# Altium schematic symbol library Centralize.SchLib: 1081 symbols (part 16 of 26)
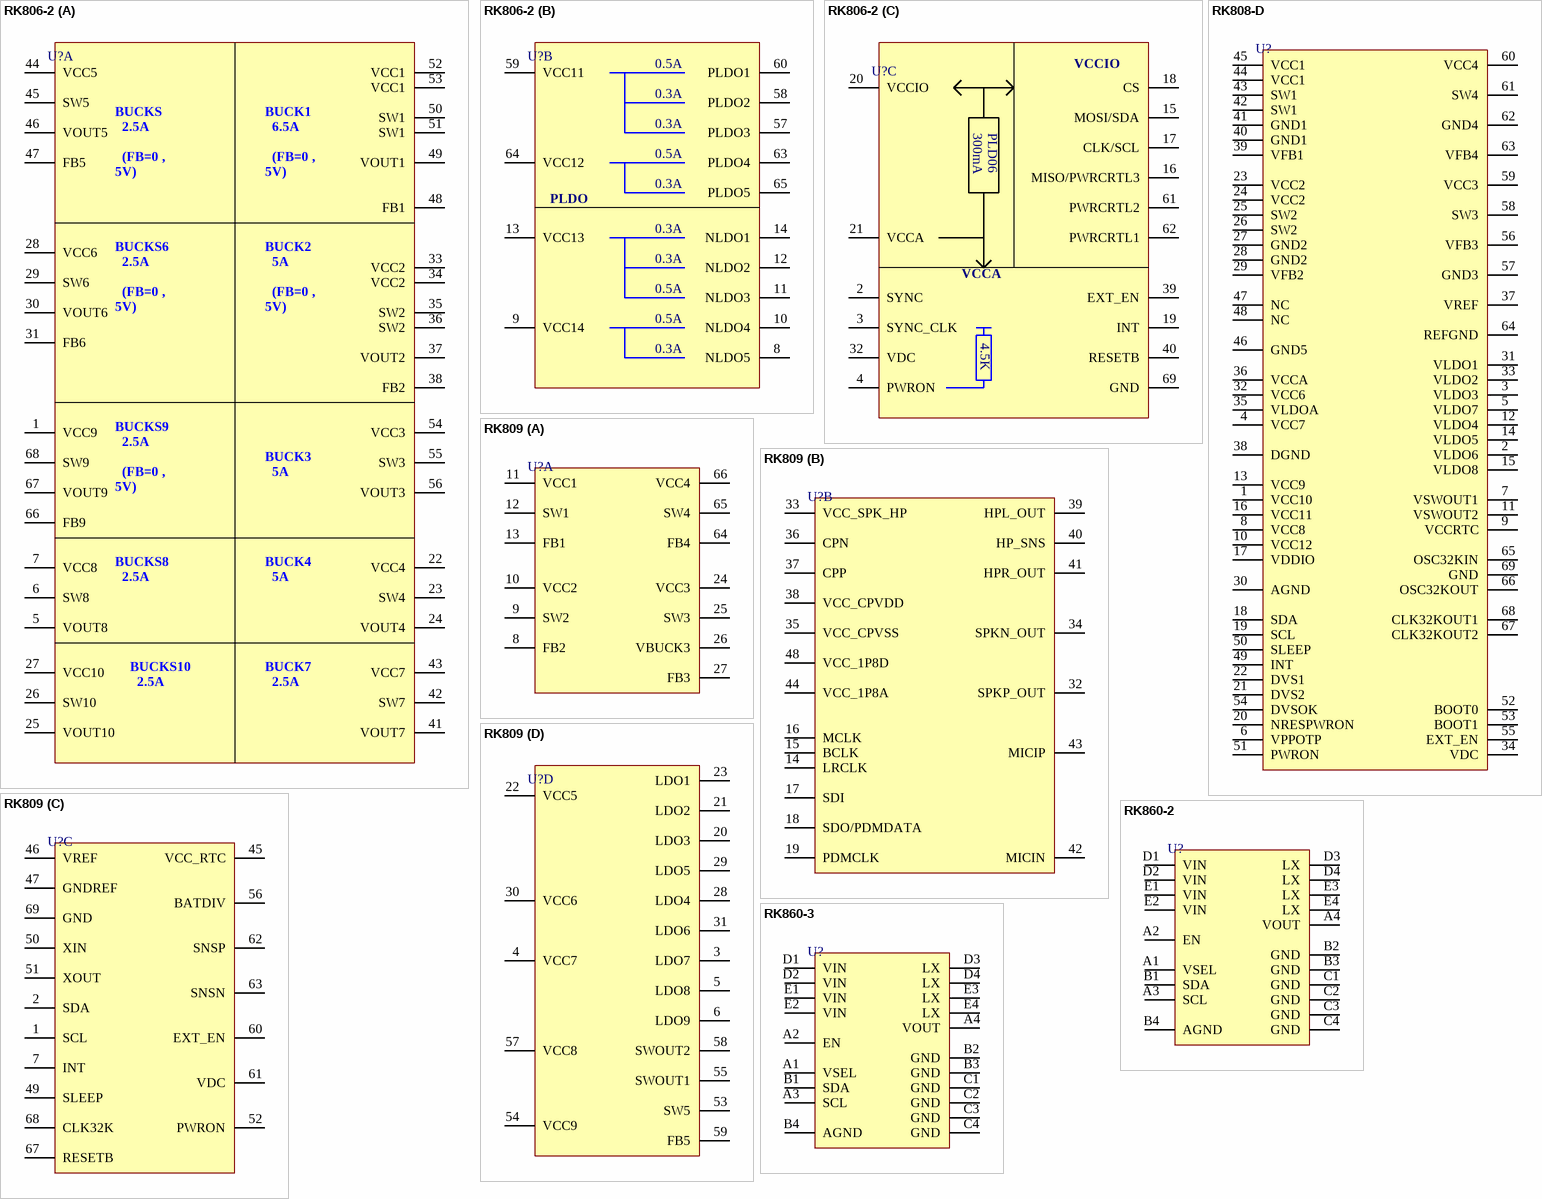
[diagram p62: symbols RK806-2 to RK860-3]

## RK860-3
designator U?
Power Management IC; Manufacturer: Rokchip; Manufacturer Part Number: RK860-3; Package: WLCSP-20; LCSC Part Number: *; ComponentLink1Description: LCSC; ComponentLink1URL: https://www.rutronik24.com/product/rockchip/rk860-3/18760321.html?emcs0=10&emcs1=null&emcs2=&emcs3=18760321; Item Type: IC
footprint WLCSP-20 (2.05x1.65) 0.4mm
pins: A1 VSEL, A2 EN, A3 SCL, A4 VOUT, B1 SDA, B2 GND, B3 GND, B4 AGND, C1 GND, C2 GND, C3 GND, C4 GND, D1 VIN, D2 VIN, D3 LX, D4 LX, E1 VIN, E2 VIN, E3 LX, E4 LX

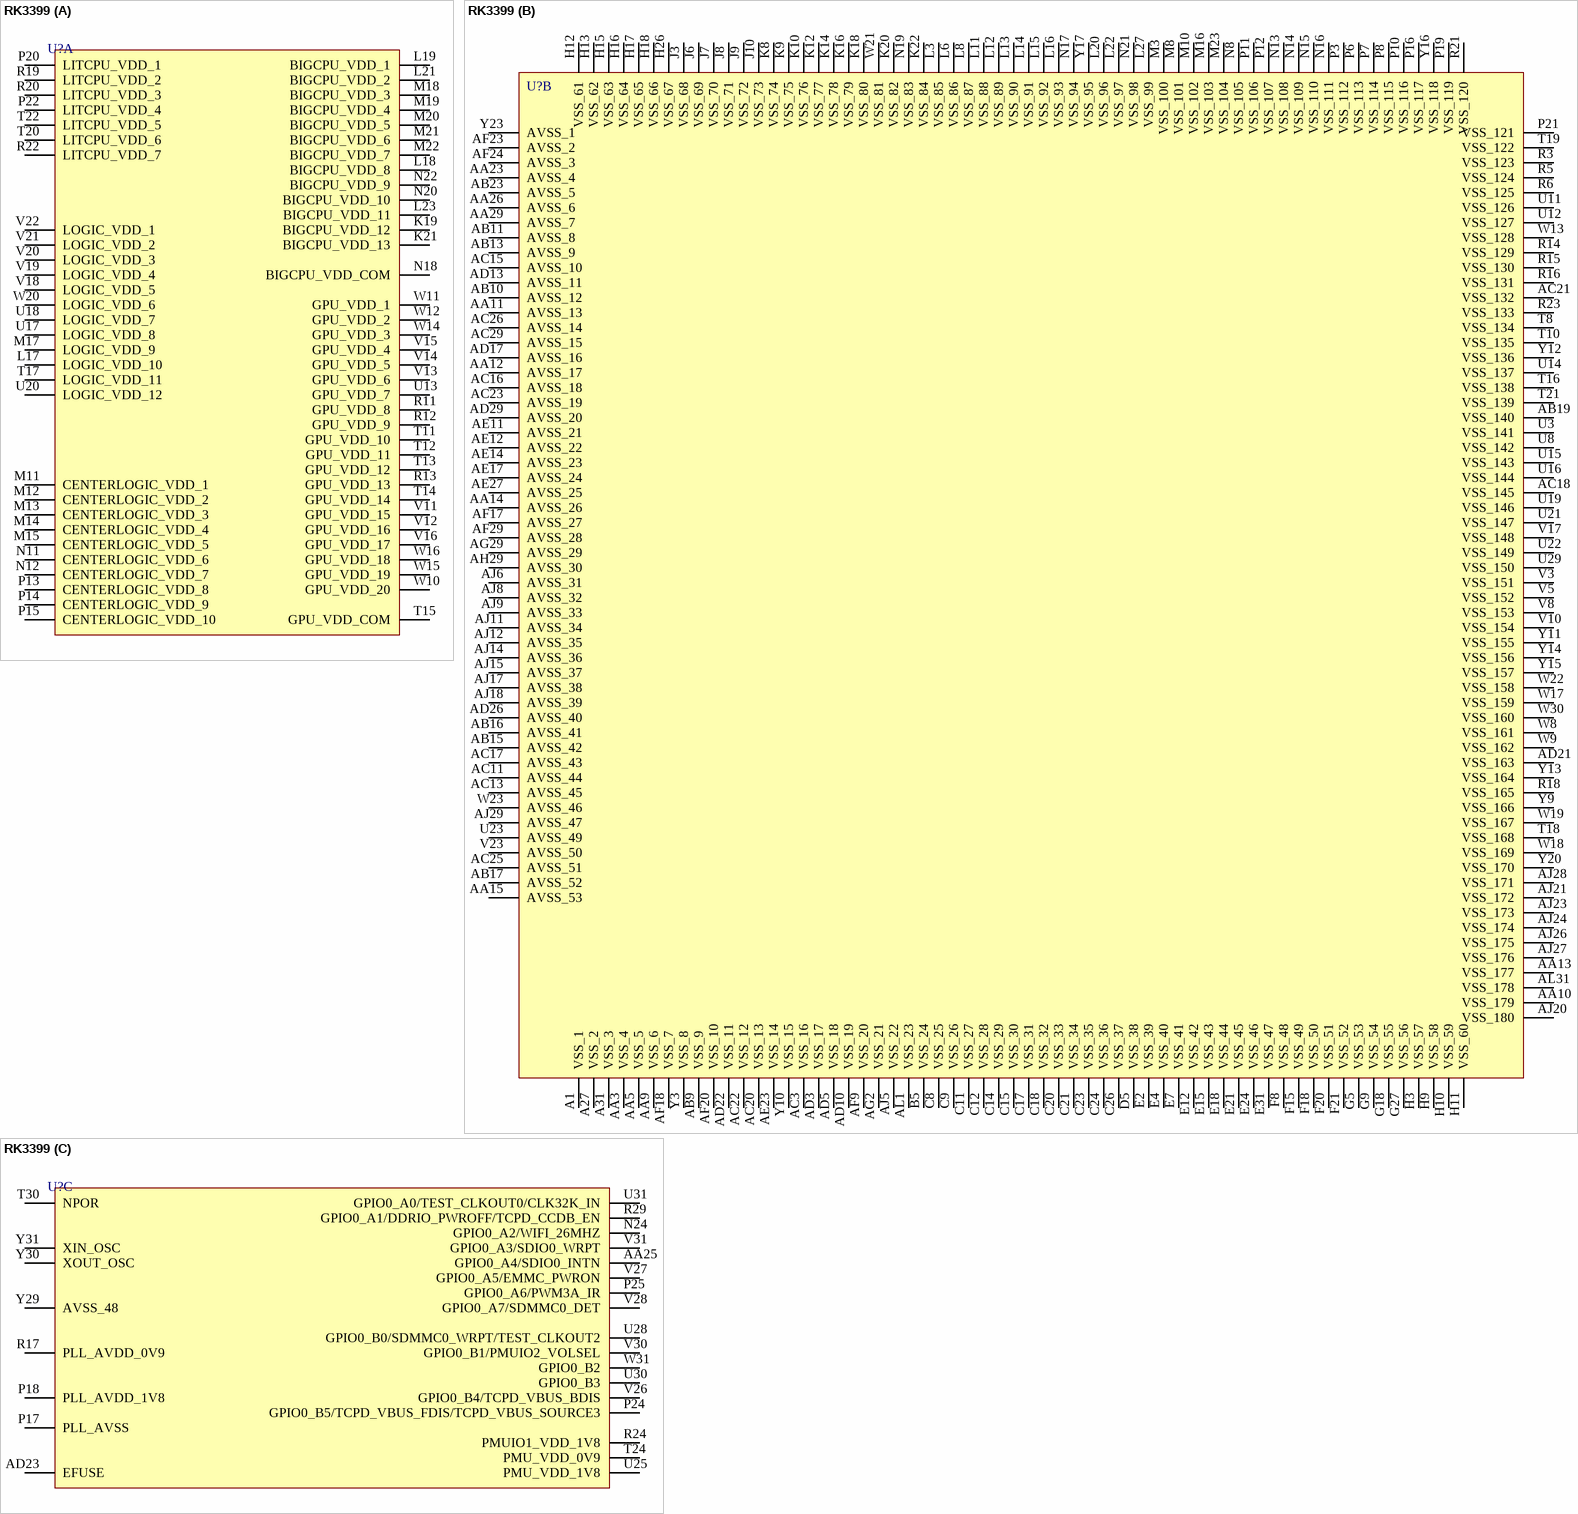
[diagram p21: symbol RK3399]

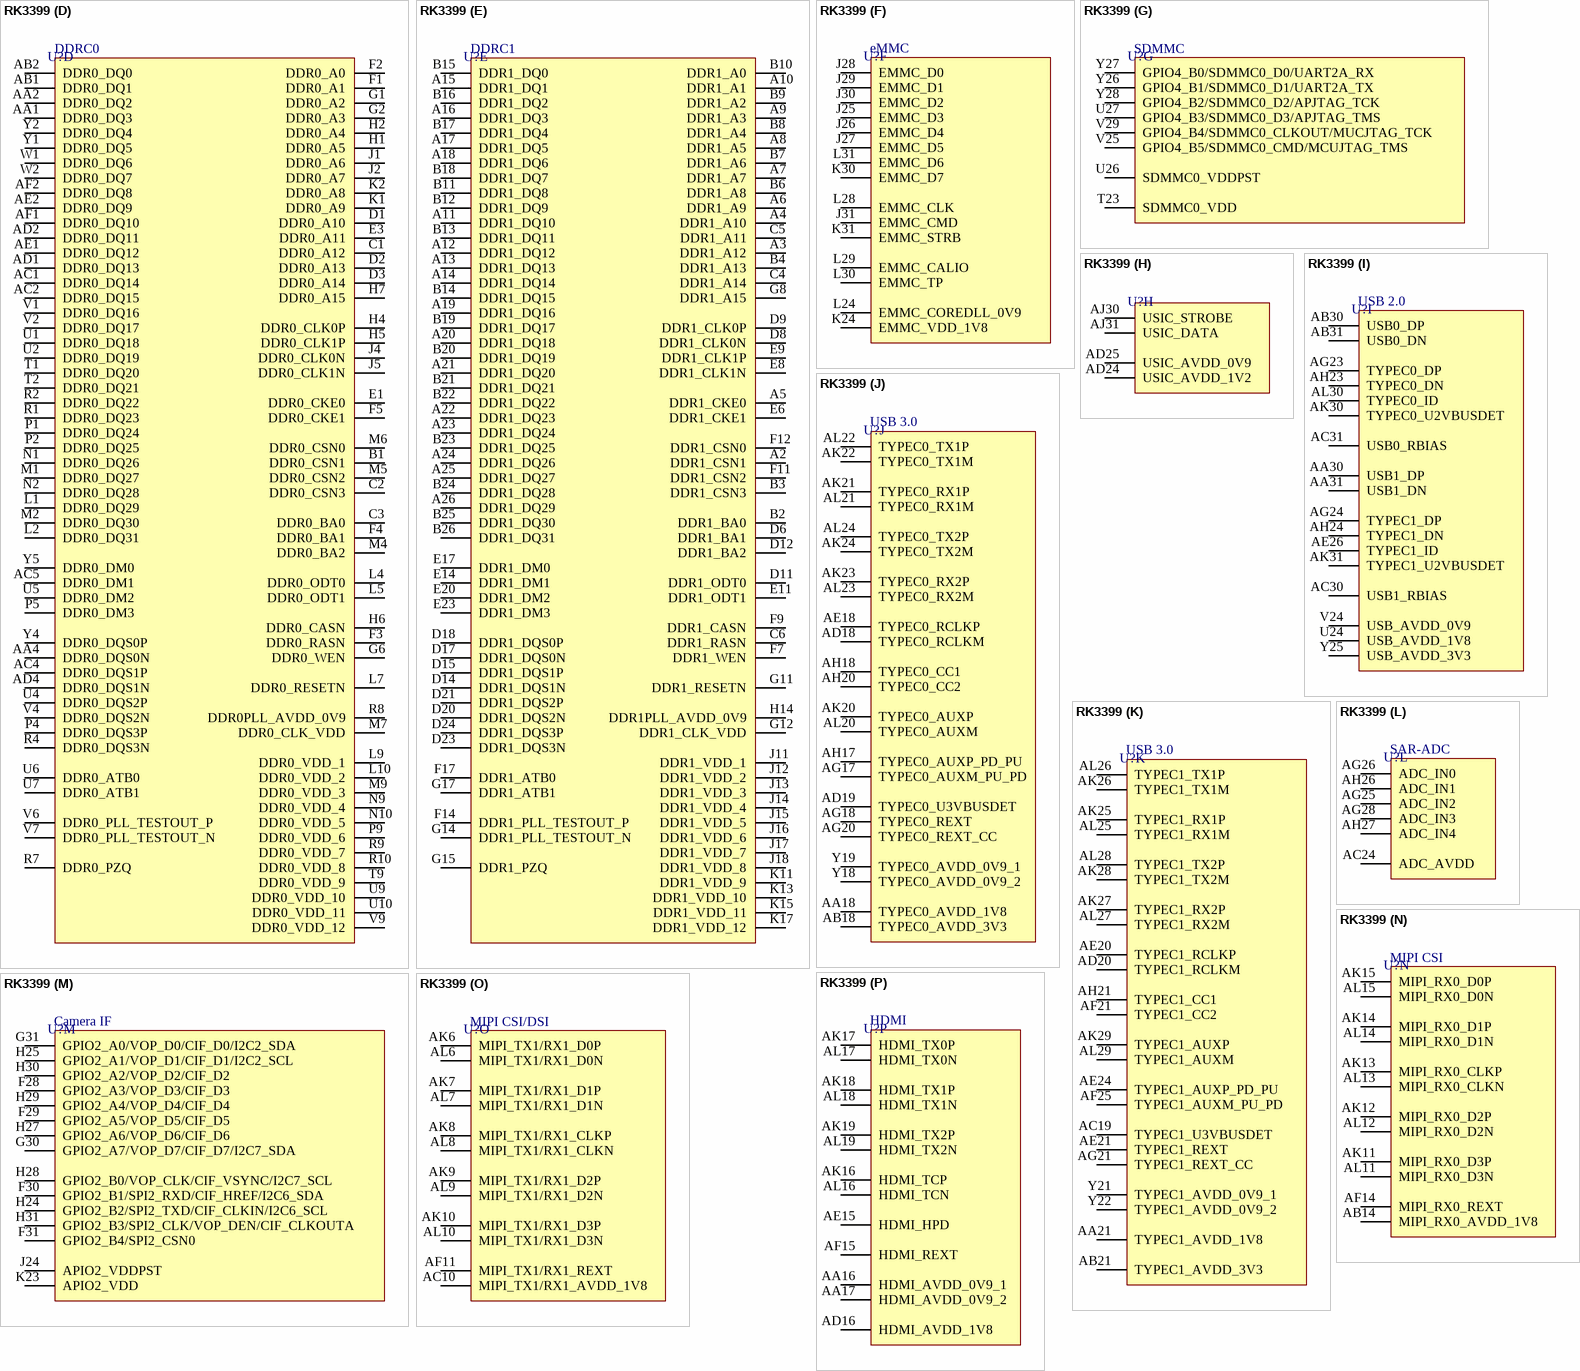
[diagram p22: symbol RK3399]

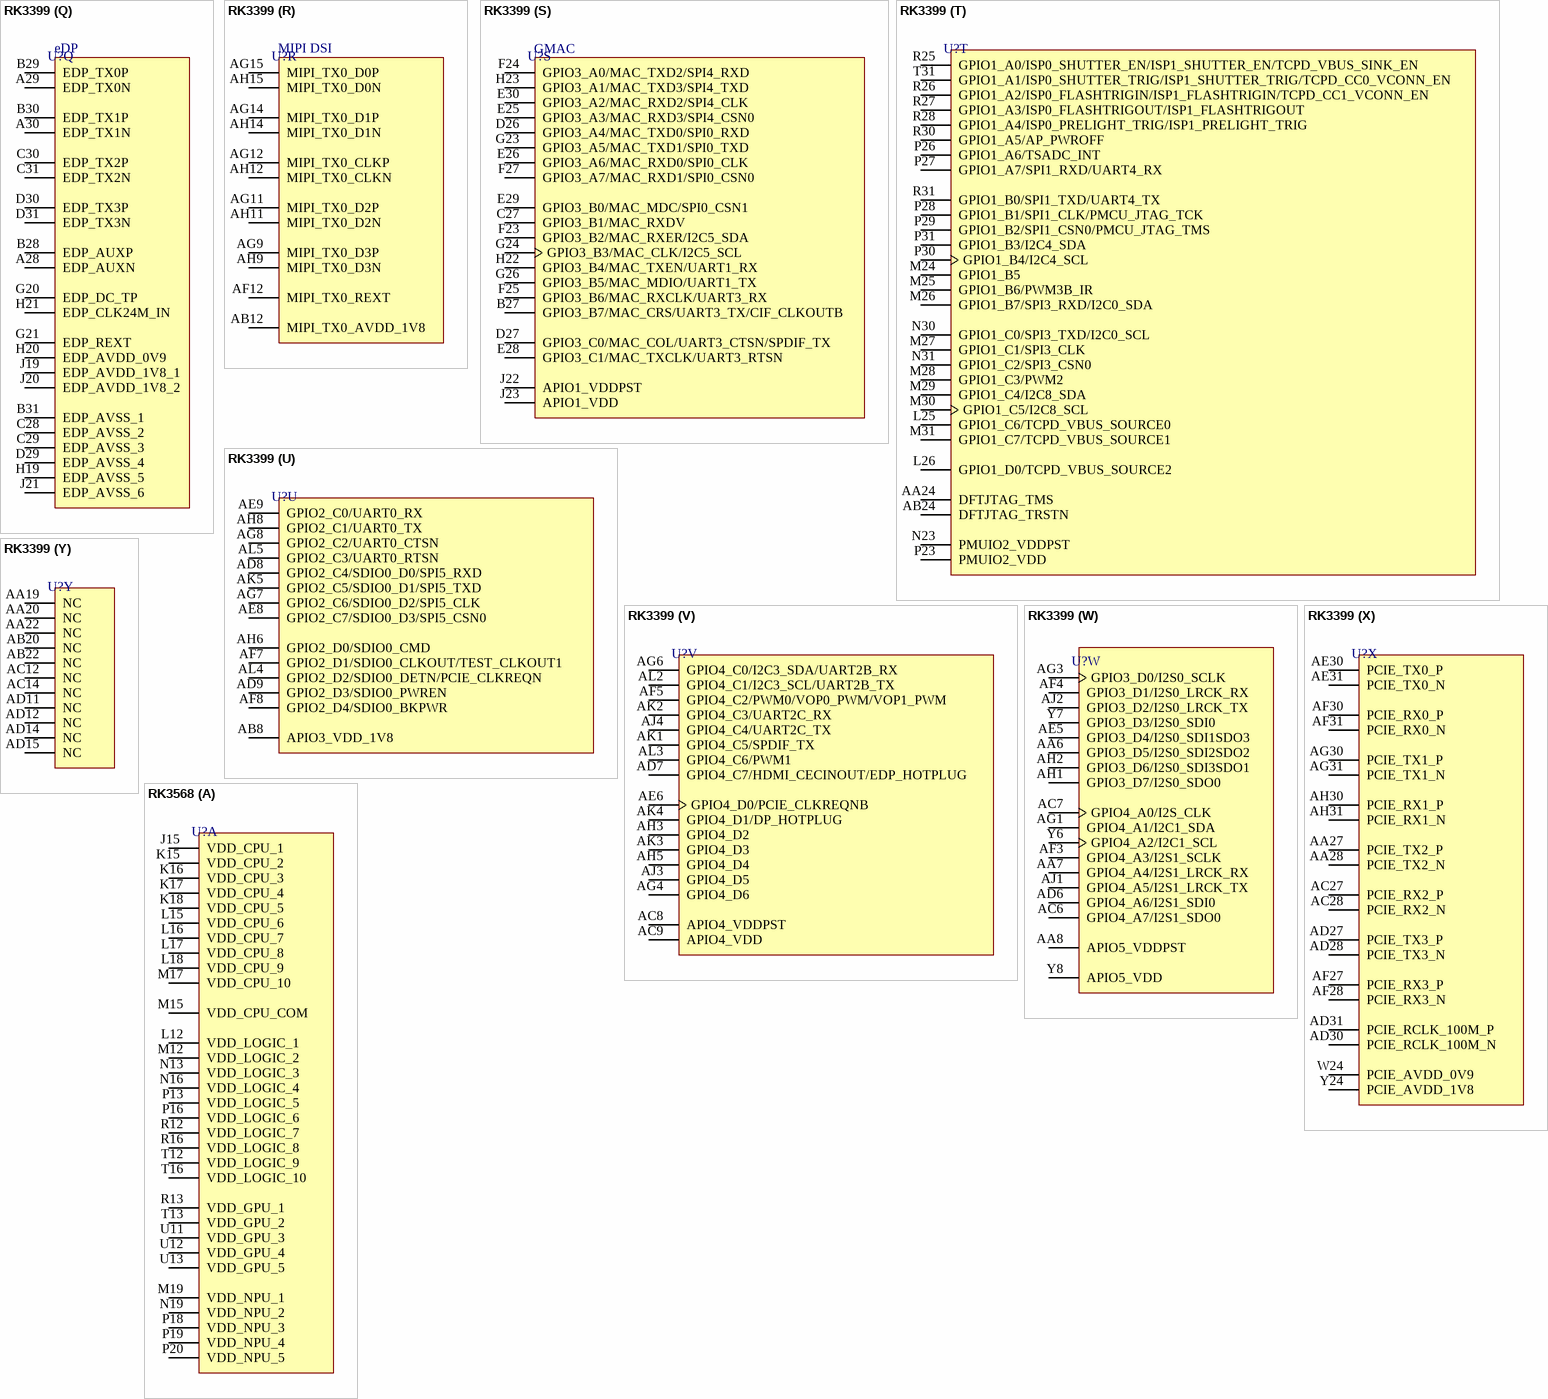
[diagram p23: symbols RK3399 to RK3568]

## RK3399
designator U?
RK3399 CPU BGA for HD set-top box chip BGA Chipset; Manufacturer: Fuzhou Rockchip Electronics; ComponentLink1Description: Aliexpress; ComponentLink1URL: https://www.aliexpress.com/item/1005001971093459.html?spm=a2g0n.productlist.0.0.3c7csv8Qsv8Quh&browser_id=3ac7e9efb8074641aaabc4d871f09748&aff_trace_key=&aff_platform=msite&m_page_id=181389a08711fc2600d8cc522bab8d702dd4189be0&gclid=&pdp_npi=2%40dis%21USD%21%2123.6%21%21%21%21%21%402101d91e16545120399167831e8b89%21%21sea&algo_pvid=4303aedd-774c-4013-953d-920f10b55003; Manufacturer Part Number: RK3399; Footprint: FCBGA828
footprint FCBGA828 (21x21)
part A pins: K19 BIGCPU_VDD_12, K21 BIGCPU_VDD_13, L17 LOGIC_VDD_10 (power), L18 BIGCPU_VDD_8, L19 BIGCPU_VDD_1, L21 BIGCPU_VDD_2, L23 BIGCPU_VDD_11, M11 CENTERLOGIC_VDD_1 (power), M12 CENTERLOGIC_VDD_2 (power), M13 CENTERLOGIC_VDD_3 (power), M14 CENTERLOGIC_VDD_4 (power), M15 CENTERLOGIC_VDD_5 (power), M17 LOGIC_VDD_9 (power), M18 BIGCPU_VDD_3, M19 BIGCPU_VDD_4, M20 BIGCPU_VDD_5, M21 BIGCPU_VDD_6, M22 BIGCPU_VDD_7, N11 CENTERLOGIC_VDD_6 (power), N12 CENTERLOGIC_VDD_7 (power), N18 BIGCPU_VDD_COM, N20 BIGCPU_VDD_10, N22 BIGCPU_VDD_9, P13 CENTERLOGIC_VDD_8 (power), P14 CENTERLOGIC_VDD_9 (power), P15 CENTERLOGIC_VDD_10 (power), P20 LITCPU_VDD_1 (power), P22 LITCPU_VDD_4 (power), R11 GPU_VDD_8, R12 GPU_VDD_9, R13 GPU_VDD_13, R19 LITCPU_VDD_2 (power), R20 LITCPU_VDD_3 (power), R22 LITCPU_VDD_7 (power), T11 GPU_VDD_10, T12 GPU_VDD_11, T13 GPU_VDD_12, T14 GPU_VDD_14, T15 GPU_VDD_COM, T17 LOGIC_VDD_11 (power), T20 LITCPU_VDD_6 (power), T22 LITCPU_VDD_5 (power), U13 GPU_VDD_7, U17 LOGIC_VDD_8 (power), U18 LOGIC_VDD_7 (power), U20 LOGIC_VDD_12 (power), V11 GPU_VDD_15, V12 GPU_VDD_16, V13 GPU_VDD_6, V14 GPU_VDD_5, V15 GPU_VDD_4, V16 GPU_VDD_17, V18 LOGIC_VDD_5 (power), V19 LOGIC_VDD_4 (power), V20 LOGIC_VDD_3 (power), V21 LOGIC_VDD_2 (power), V22 LOGIC_VDD_1 (power), W10 GPU_VDD_20, W11 GPU_VDD_1, W12 GPU_VDD_2, W14 GPU_VDD_3, W15 GPU_VDD_19, W16 GPU_VDD_18, W20 LOGIC_VDD_6 (power)
part B pins: A1 VSS_1 (power), A27 VSS_2 (power), A31 VSS_3 (power), AA3 VSS_4 (power), AA5 VSS_5 (power), AA9 VSS_6 (power), AA10 VSS_179 (power), AA11 AVSS_13, AA12 AVSS_17, AA13 VSS_177 (power), AA14 AVSS_26, AA15 AVSS_53, AA23 AVSS_4, AA26 AVSS_6, AA29 AVSS_7, AB9 VSS_9 (power), AB10 AVSS_12, AB11 AVSS_8, AB13 AVSS_9, AB15 AVSS_42, AB16 AVSS_41, AB17 AVSS_52, AB19 VSS_140 (power), AB23 AVSS_5, AC3 VSS_16 (power), AC11 AVSS_44, AC13 AVSS_45, AC15 AVSS_10, AC16 AVSS_18, AC17 AVSS_43, AC18 VSS_145 (power), AC20 VSS_13 (power), AC21 VSS_132 (power), AC22 VSS_12 (power), AC23 AVSS_19, AC25 AVSS_51, AC26 AVSS_14, AC29 AVSS_15, AD3 VSS_17 (power), AD5 VSS_18 (power), AD10 VSS_19 (power), AD13 AVSS_11, AD17 AVSS_16, AD21 VSS_163 (power), AD22 VSS_11 (power), AD26 AVSS_40, AD29 AVSS_20, AE11 AVSS_21, AE12 AVSS_22, AE14 AVSS_23, AE17 AVSS_24, AE23 VSS_14 (power), AE27 AVSS_25, AF9 VSS_20 (power), AF17 AVSS_27, AF18 VSS_7 (power), AF20 VSS_10 (power), AF23 AVSS_2, AF24 AVSS_3, AF29 AVSS_28, AG2 VSS_21 (power), AG29 AVSS_29, AH29 AVSS_30, AJ5 VSS_22 (power), AJ6 AVSS_31, AJ8 AVSS_32, AJ9 AVSS_33, AJ11 AVSS_34, AJ12 AVSS_35, AJ14 AVSS_36, AJ15 AVSS_37, AJ17 AVSS_38, AJ18 AVSS_39, AJ20 VSS_180 (power), AJ21 VSS_172 (power), AJ23 VSS_173 (power), AJ24 VSS_174 (power), AJ26 VSS_175 (power), AJ27 VSS_176 (power), AJ28 VSS_171 (power), AJ29 AVSS_47, AL1 VSS_23 (power), AL31 VSS_178 (power), B5 VSS_24 (power), C8 VSS_25 (power), C9 VSS_26 (power), C11 VSS_27 (power), C12 VSS_28 (power), C14 VSS_29 (power), C15 VSS_30 (power), C17 VSS_31 (power), C18 VSS_32 (power), C20 VSS_33 (power), C21 VSS_34 (power), C23 VSS_35 (power), C24 VSS_36 (power), C26 VSS_37 (power), D5 VSS_38 (power), E2 VSS_39 (power), E4 VSS_40 (power), E7 VSS_41 (power), E12 VSS_42 (power), E15 VSS_43 (power), E18 VSS_44 (power), E21 VSS_45 (power), E24 VSS_46 (power), E31 VSS_47 (power), F8 VSS_48 (power), F15 VSS_49 (power), F18 VSS_50 (power), F20 VSS_51 (power), F21 VSS_52 (power), G5 VSS_53 (power), G9 VSS_54 (power), G18 VSS_55 (power), G27 VSS_56 (power), H3 VSS_57 (power), H9 VSS_58 (power), H10 VSS_59 (power), H11 VSS_60 (power), H12 VSS_61 (power), H13 VSS_62 (power), H15 VSS_63 (power), H16 VSS_64 (power), H17 VSS_65 (power), H18 VSS_66 (power), H26 VSS_67 (power), J3 VSS_68 (power), J6 VSS_69 (power), J7 VSS_70 (power), J8 VSS_71 (power), J9 VSS_72 (power), J10 VSS_73 (power), K8 VSS_74 (power), K9 VSS_75 (power), K10 VSS_76 (power), K12 VSS_77 (power), K14 VSS_78 (power), K16 VSS_79 (power), K18 VSS_80 (power), K20 VSS_82 (power), K22 VSS_84 (power), L3 VSS_85 (power), L6 VSS_86 (power), L8 VSS_87 (power), L11 VSS_88 (power), L12 VSS_89 (power), L13 VSS_90 (power), L14 VSS_91 (power), L15 VSS_92 (power), L16 VSS_93 (power), L20 VSS_96 (power), L22 VSS_97 (power), L27 VSS_99 (power), M3 VSS_100 (power), M8 VSS_101 (power), M10 VSS_102 (power), M16 VSS_103 (power), M23 VSS_104 (power), N8 VSS_105 (power), N13 VSS_108 (power), N14 VSS_109 (power), N15 VSS_110 (power), N16 VSS_111 (power), N17 VSS_94 (power), N19 VSS_83 (power), N21 VSS_98 (power), P3 VSS_112 (power), P6 VSS_113 (power), P7 VSS_114 (power), P8 VSS_115 (power), P10 VSS_116 (power), P11 VSS_106 (power), P12 VSS_107 (power), P16 VSS_117 (power), P19 VSS_119 (power), P21 VSS_121 (power), R3 VSS_123 (power), R5 VSS_124 (power), R6 VSS_125 (power), R14 VSS_129 (power), R15 VSS_130 (power), R16 VSS_131 (power), R18 VSS_165 (power), R21 VSS_120 (power), R23 VSS_133 (power), T8 VSS_134 (power), T10 VSS_135 (power), T16 VSS_138 (power), T18 VSS_168 (power), T19 VSS_122 (power), T21 VSS_139 (power), U3 VSS_141 (power), U8 VSS_142 (power), U11 VSS_126 (power), U12 VSS_127 (power), U14 VSS_137 (power), U15 VSS_143 (power), U16 VSS_144 (power), U19 VSS_146 (power), U21 VSS_147 (power), U22 VSS_149 (power), U23 AVSS_49, U29 VSS_150 (power), V3 VSS_151 (power), V5 VSS_152 (power), V8 VSS_153 (power), V10 VSS_154 (power), V17 VSS_148 (power), V23 AVSS_50, W8 VSS_161 (power), W9 VSS_162 (power), W13 VSS_128 (power), W17 VSS_159 (power), W18 VSS_169 (power), W19 VSS_167 (power), W21 VSS_81 (power), W22 VSS_158 (power), W23 AVSS_46, W30 VSS_160 (power), Y3 VSS_8 (power), Y9 VSS_166 (power), Y10 VSS_15 (power), Y11 VSS_155 (power), Y12 VSS_136 (power), Y13 VSS_164 (power), Y14 VSS_156 (power), Y15 VSS_157 (power), Y16 VSS_118 (power), Y17 VSS_95 (power), Y20 VSS_170 (power), Y23 AVSS_1
part C pins: AA25 GPIO0_A4/SDIO0_INTN, AD23 EFUSE, N24 GPIO0_A2/WIFI_26MHZ, P17 PLL_AVSS, P18 PLL_AVDD_1V8, P24 GPIO0_B5/TCPD_VBUS_FDIS/TCPD_VBUS_SOURCE3, P25 GPIO0_A6/PWM3A_IR, R17 PLL_AVDD_0V9, R24 PMUIO1_VDD_1V8, R29 GPIO0_A1/DDRIO_PWROFF/TCPD_CCDB_EN, T24 PMU_VDD_0V9, T30 NPOR, U25 PMU_VDD_1V8, U28 GPIO0_B0/SDMMC0_WRPT/TEST_CLKOUT2, U30 GPIO0_B3, U31 GPIO0_A0/TEST_CLKOUT0/CLK32K_IN, V26 GPIO0_B4/TCPD_VBUS_BDIS, V27 GPIO0_A5/EMMC_PWRON, V28 GPIO0_A7/SDMMC0_DET, V30 GPIO0_B1/PMUIO2_VOLSEL, V31 GPIO0_A3/SDIO0_WRPT, W31 GPIO0_B2, Y29 AVSS_48, Y30 XOUT_OSC, Y31 XIN_OSC
part D pins: AA1 DDR0_DQ3, AA2 DDR0_DQ2, AA4 DDR0_DQS0N, AB1 DDR0_DQ1, AB2 DDR0_DQ0, AC1 DDR0_DQ14, AC2 DDR0_DQ15, AC4 DDR0_DQS1P, AC5 DDR0_DM1, AD1 DDR0_DQ13, AD2 DDR0_DQ11, AD4 DDR0_DQS1N, AE1 DDR0_DQ12, AE2 DDR0_DQ9, AF1 DDR0_DQ10, AF2 DDR0_DQ8, B1 DDR0_CSN1, C1 DDR0_A12, C2 DDR0_CSN3, C3 DDR0_BA0, D1 DDR0_A10, D2 DDR0_A13, D3 DDR0_A14, E1 DDR0_CKE0, E3 DDR0_A11, F1 DDR0_A1, F2 DDR0_A0, F3 DDR0_RASN, F4 DDR0_BA1, F5 DDR0_CKE1, G1 DDR0_A2, G2 DDR0_A3, G6 DDR0_WEN, H1 DDR0_A5, H2 DDR0_A4, H4 DDR0_CLK0P, H5 DDR0_CLK1P, H6 DDR0_CASN, H7 DDR0_A15, J1 DDR0_A6, J2 DDR0_A7, J4 DDR0_CLK0N, J5 DDR0_CLK1N, K1 DDR0_A9, K2 DDR0_A8, L1 DDR0_DQ29, L2 DDR0_DQ31, L4 DDR0_ODT0, L5 DDR0_ODT1, L7 DDR0_RESETN, L9 DDR0_VDD_1, L10 DDR0_VDD_2, M1 DDR0_DQ27, M2 DDR0_DQ30, M4 DDR0_BA2, M5 DDR0_CSN2, M6 DDR0_CSN0, M7 DDR0_CLK_VDD, M9 DDR0_VDD_3, N1 DDR0_DQ26, N2 DDR0_DQ28, N9 DDR0_VDD_4, N10 DDR0_VDD_5, P1 DDR0_DQ24, P2 DDR0_DQ25, P4 DDR0_DQS3P, P5 DDR0_DM3, P9 DDR0_VDD_6, R1 DDR0_DQ23, R2 DDR0_DQ22, R4 DDR0_DQS3N, R7 DDR0_PZQ, R8 DDR0PLL_AVDD_0V9, R9 DDR0_VDD_7, R10 DDR0_VDD_8, T1 DDR0_DQ20, T2 DDR0_DQ21, T9 DDR0_VDD_9, U1 DDR0_DQ18, U2 DDR0_DQ19, U4 DDR0_DQS2P, U5 DDR0_DM2, U6 DDR0_ATB0, U7 DDR0_ATB1, U9 DDR0_VDD_10, U10 DDR0_VDD_11, V1 DDR0_DQ16, V2 DDR0_DQ17, V4 DDR0_DQS2N, V6 DDR0_PLL_TESTOUT_P, V7 DDR0_PLL_TESTOUT_N, V9 DDR0_VDD_12, W1 DDR0_DQ6, W2 DDR0_DQ7, Y1 DDR0_DQ5, Y2 DDR0_DQ4, Y4 DDR0_DQS0P, Y5 DDR0_DM0
part E pins: A2 DDR1_CSN1, A3 DDR1_A12, A4 DDR1_A10, A5 DDR1_CKE0, A6 DDR1_A9, A7 DDR1_A7, A8 DDR1_A5, A9 DDR1_A3, A10 DDR1_A1, A11 DDR1_DQ10, A12 DDR1_DQ12, A13 DDR1_DQ13, A14 DDR1_DQ14, A15 DDR1_DQ1, A16 DDR1_DQ3, A17 DDR1_DQ5, A18 DDR1_DQ6, A19 DDR1_DQ16, A20 DDR1_DQ18, A21 DDR1_DQ20, A22 DDR1_DQ23, A23 DDR1_DQ24, A24 DDR1_DQ26, A25 DDR1_DQ27, A26 DDR1_DQ29, B2 DDR1_BA0, B3 DDR1_CSN3, B4 DDR1_A13, B6 DDR1_A8, B7 DDR1_A6, B8 DDR1_A4, B9 DDR1_A2, B10 DDR1_A0, B11 DDR1_DQ8, B12 DDR1_DQ9, B13 DDR1_DQ11, B14 DDR1_DQ15, B15 DDR1_DQ0, B16 DDR1_DQ2, B17 DDR1_DQ4, B18 DDR1_DQ7, B19 DDR1_DQ17, B20 DDR1_DQ19, B21 DDR1_DQ21, B22 DDR1_DQ22, B23 DDR1_DQ25, B24 DDR1_DQ28, B25 DDR1_DQ30, B26 DDR1_DQ31, C4 DDR1_A14, C5 DDR1_A11, C6 DDR1_RASN, D6 DDR1_BA1, D8 DDR1_CLK0N, D9 DDR1_CLK0P, D11 DDR1_ODT0, D12 DDR1_BA2, D14 DDR1_DQS1N, D15 DDR1_DQS1P, D17 DDR1_DQS0N, D18 DDR1_DQS0P, D20 DDR1_DQS2N, D21 DDR1_DQS2P, D23 DDR1_DQS3N, D24 DDR1_DQS3P, E6 DDR1_CKE1, E8 DDR1_CLK1N, E9 DDR1_CLK1P, E11 DDR1_ODT1, E14 DDR1_DM1, E17 DDR1_DM0, E20 DDR1_DM2, E23 DDR1_DM3, F7 DDR1_WEN, F9 DDR1_CASN, F11 DDR1_CSN2, F12 DDR1_CSN0, F14 DDR1_PLL_TESTOUT_P, F17 DDR1_ATB0, G8 DDR1_A15, G11 DDR1_RESETN, G12 DDR1_CLK_VDD, G14 DDR1_PLL_TESTOUT_N, G15 DDR1_PZQ, G17 DDR1_ATB1, H14 DDR1PLL_AVDD_0V9, J11 DDR1_VDD_1, J12 DDR1_VDD_2, J13 DDR1_VDD_3, J14 DDR1_VDD_4, J15 DDR1_VDD_5, J16 DDR1_VDD_6, J17 DDR1_VDD_7, J18 DDR1_VDD_8, K11 DDR1_VDD_9, K13 DDR1_VDD_10, K15 DDR1_VDD_11, K17 DDR1_VDD_12
part F pins: J25 EMMC_D3, J26 EMMC_D4, J27 EMMC_D5, J28 EMMC_D0, J29 EMMC_D1, J30 EMMC_D2, J31 EMMC_CMD, K24 EMMC_VDD_1V8, K30 EMMC_D7, K31 EMMC_STRB, L24 EMMC_COREDLL_0V9, L28 EMMC_CLK, L29 EMMC_CALIO, L30 EMMC_TP, L31 EMMC_D6
part G pins: T23 SDMMC0_VDD, U26 SDMMC0_VDDPST, U27 GPIO4_B3/SDMMC0_D3/APJTAG_TMS, V25 GPIO4_B5/SDMMC0_CMD/MCUJTAG_TMS, V29 GPIO4_B4/SDMMC0_CLKOUT/MUCJTAG_TCK, Y26 GPIO4_B1/SDMMC0_D1/UART2A_TX, Y27 GPIO4_B0/SDMMC0_D0/UART2A_RX, Y28 GPIO4_B2/SDMMC0_D2/APJTAG_TCK
part H pins: AD24 USIC_AVDD_1V2, AD25 USIC_AVDD_0V9, AJ30 USIC_STROBE, AJ31 USIC_DATA
part I pins: AA30 USB1_DP, AA31 USB1_DN, AB30 USB0_DP, AB31 USB0_DN, AC30 USB1_RBIAS, AC31 USB0_RBIAS, AE26 TYPEC1_ID, AG23 TYPEC0_DP, AG24 TYPEC1_DP, AH23 TYPEC0_DN, AH24 TYPEC1_DN, AK30 TYPEC0_U2VBUSDET, AK31 TYPEC1_U2VBUSDET, AL30 TYPEC0_ID, U24 USB_AVDD_1V8, V24 USB_AVDD_0V9, Y25 USB_AVDD_3V3
part J pins: AA18 TYPEC0_AVDD_1V8, AB18 TYPEC0_AVDD_3V3, AD18 TYPEC0_RCLKM, AD19 TYPEC0_U3VBUSDET, AE18 TYPEC0_RCLKP, AG17 TYPEC0_AUXM_PU_PD, AG18 TYPEC0_REXT, AG20 TYPEC0_REXT_CC, AH17 TYPEC0_AUXP_PD_PU, AH18 TYPEC0_CC1, AH20 TYPEC0_CC2, AK20 TYPEC0_AUXP, AK21 TYPEC0_RX1P, AK22 TYPEC0_TX1M, AK23 TYPEC0_RX2P, AK24 TYPEC0_TX2M, AL20 TYPEC0_AUXM, AL21 TYPEC0_RX1M, AL22 TYPEC0_TX1P, AL23 TYPEC0_RX2M, AL24 TYPEC0_TX2P, Y18 TYPEC0_AVDD_0V9_2, Y19 TYPEC0_AVDD_0V9_1
part K pins: AA21 TYPEC1_AVDD_1V8, AB21 TYPEC1_AVDD_3V3, AC19 TYPEC1_U3VBUSDET, AD20 TYPEC1_RCLKM, AE20 TYPEC1_RCLKP, AE21 TYPEC1_REXT, AE24 TYPEC1_AUXP_PD_PU, AF21 TYPEC1_CC2, AF25 TYPEC1_AUXM_PU_PD, AG21 TYPEC1_REXT_CC, AH21 TYPEC1_CC1, AK25 TYPEC1_RX1P, AK26 TYPEC1_TX1M, AK27 TYPEC1_RX2P, AK28 TYPEC1_TX2M, AK29 TYPEC1_AUXP, AL25 TYPEC1_RX1M, AL26 TYPEC1_TX1P, AL27 TYPEC1_RX2M, AL28 TYPEC1_TX2P, AL29 TYPEC1_AUXM, Y21 TYPEC1_AVDD_0V9_1, Y22 TYPEC1_AVDD_0V9_2
part L pins: AC24 ADC_AVDD, AG25 ADC_IN2, AG26 ADC_IN0, AG28 ADC_IN3, AH26 ADC_IN1, AH27 ADC_IN4
part M pins: F28 GPIO2_A3/VOP_D3/CIF_D3, F29 GPIO2_A5/VOP_D5/CIF_D5, F30 GPIO2_B1/SPI2_RXD/CIF_HREF/I2C6_SDA, F31 GPIO2_B4/SPI2_CSN0, G30 GPIO2_A7/VOP_D7/CIF_D7/I2C7_SDA, G31 GPIO2_A0/VOP_D0/CIF_D0/I2C2_SDA, H24 GPIO2_B2/SPI2_TXD/CIF_CLKIN/I2C6_SCL, H25 GPIO2_A1/VOP_D1/CIF_D1/I2C2_SCL, H27 GPIO2_A6/VOP_D6/CIF_D6, H28 GPIO2_B0/VOP_CLK/CIF_VSYNC/I2C7_SCL, H29 GPIO2_A4/VOP_D4/CIF_D4, H30 GPIO2_A2/VOP_D2/CIF_D2, H31 GPIO2_B3/SPI2_CLK/VOP_DEN/CIF_CLKOUTA, J24 APIO2_VDDPST, K23 APIO2_VDD
part N pins: AB14 MIPI_RX0_AVDD_1V8, AF14 MIPI_RX0_REXT, AK11 MIPI_RX0_D3P, AK12 MIPI_RX0_D2P, AK13 MIPI_RX0_CLKP, AK14 MIPI_RX0_D1P, AK15 MIPI_RX0_D0P, AL11 MIPI_RX0_D3N, AL12 MIPI_RX0_D2N, AL13 MIPI_RX0_CLKN, AL14 MIPI_RX0_D1N, AL15 MIPI_RX0_D0N
part O pins: AC10 MIPI_TX1/RX1_AVDD_1V8, AF11 MIPI_TX1/RX1_REXT, AK6 MIPI_TX1/RX1_D0P, AK7 MIPI_TX1/RX1_D1P, AK8 MIPI_TX1/RX1_CLKP, AK9 MIPI_TX1/RX1_D2P, AK10 MIPI_TX1/RX1_D3P, AL6 MIPI_TX1/RX1_D0N, AL7 MIPI_TX1/RX1_D1N, AL8 MIPI_TX1/RX1_CLKN, AL9 MIPI_TX1/RX1_D2N, AL10 MIPI_TX1/RX1_D3N
part P pins: AA16 HDMI_AVDD_0V9_1, AA17 HDMI_AVDD_0V9_2, AD16 HDMI_AVDD_1V8, AE15 HDMI_HPD, AF15 HDMI_REXT, AK16 HDMI_TCP, AK17 HDMI_TX0P, AK18 HDMI_TX1P, AK19 HDMI_TX2P, AL16 HDMI_TCN, AL17 HDMI_TX0N, AL18 HDMI_TX1N, AL19 HDMI_TX2N
part Q pins: A28 EDP_AUXN, A29 EDP_TX0N, A30 EDP_TX1N, B28 EDP_AUXP, B29 EDP_TX0P, B30 EDP_TX1P, B31 EDP_AVSS_1, C28 EDP_AVSS_2, C29 EDP_AVSS_3, C30 EDP_TX2P, C31 EDP_TX2N, D29 EDP_AVSS_4, D30 EDP_TX3P, D31 EDP_TX3N, G20 EDP_DC_TP, G21 EDP_REXT, H19 EDP_AVSS_5, H20 EDP_AVDD_0V9, H21 EDP_CLK24M_IN, J19 EDP_AVDD_1V8_1, J20 EDP_AVDD_1V8_2, J21 EDP_AVSS_6
part R pins: AB12 MIPI_TX0_AVDD_1V8, AF12 MIPI_TX0_REXT, AG9 MIPI_TX0_D3P, AG11 MIPI_TX0_D2P, AG12 MIPI_TX0_CLKP, AG14 MIPI_TX0_D1P, AG15 MIPI_TX0_D0P, AH9 MIPI_TX0_D3N, AH11 MIPI_TX0_D2N, AH12 MIPI_TX0_CLKN, AH14 MIPI_TX0_D1N, AH15 MIPI_TX0_D0N
part S pins: B27 GPIO3_B7/MAC_CRS/UART3_TX/CIF_CLKOUTB, C27 GPIO3_B1/MAC_RXDV, D26 GPIO3_A4/MAC_TXD0/SPI0_RXD, D27 GPIO3_C0/MAC_COL/UART3_CTSN/SPDIF_TX, E25 GPIO3_A3/MAC_RXD3/SPI4_CSN0, E26 GPIO3_A6/MAC_RXD0/SPI0_CLK, E28 GPIO3_C1/MAC_TXCLK/UART3_RTSN, E29 GPIO3_B0/MAC_MDC/SPI0_CSN1, E30 GPIO3_A2/MAC_RXD2/SPI4_CLK, F23 GPIO3_B2/MAC_RXER/I2C5_SDA, F24 GPIO3_A0/MAC_TXD2/SPI4_RXD, F25 GPIO3_B6/MAC_RXCLK/UART3_RX, F27 GPIO3_A7/MAC_RXD1/SPI0_CSN0, G23 GPIO3_A5/MAC_TXD1/SPI0_TXD, G24 GPIO3_B3/MAC_CLK/I2C5_SCL, G26 GPIO3_B5/MAC_MDIO/UART1_TX, H22 GPIO3_B4/MAC_TXEN/UART1_RX, H23 GPIO3_A1/MAC_TXD3/SPI4_TXD, J22 APIO1_VDDPST, J23 APIO1_VDD
part T pins: AA24 DFTJTAG_TMS, AB24 DFTJTAG_TRSTN, L25 GPIO1_C6/TCPD_VBUS_SOURCE0, L26 GPIO1_D0/TCPD_VBUS_SOURCE2, M24 GPIO1_B5, M25 GPIO1_B6/PWM3B_IR, M26 GPIO1_B7/SPI3_RXD/I2C0_SDA, M27 GPIO1_C1/SPI3_CLK, M28 GPIO1_C3/PWM2, M29 GPIO1_C4/I2C8_SDA, M30 GPIO1_C5/I2C8_SCL, M31 GPIO1_C7/TCPD_VBUS_SOURCE1, N23 PMUIO2_VDDPST, N30 GPIO1_C0/SPI3_TXD/I2C0_SCL, N31 GPIO1_C2/SPI3_CSN0, P23 PMUIO2_VDD, P26 GPIO1_A6/TSADC_INT, P27 GPIO1_A7/SPI1_RXD/UART4_RX, P28 GPIO1_B1/SPI1_CLK/PMCU_JTAG_TCK, P29 GPIO1_B2/SPI1_CSN0/PMCU_JTAG_TMS, P30 GPIO1_B4/I2C4_SCL, P31 GPIO1_B3/I2C4_SDA, R25 GPIO1_A0/ISP0_SHUTTER_EN/ISP1_SHUTTER_EN/TCPD_VBUS_SINK_EN, R26 GPIO1_A2/ISP0_FLASHTRIGIN/ISP1_FLASHTRIGIN/TCPD_CC1_VCONN_EN, R27 GPIO1_A3/ISP0_FLASHTRIGOUT/ISP1_FLASHTRIGOUT, R28 GPIO1_A4/ISP0_PRELIGHT_TRIG/ISP1_PRELIGHT_TRIG, R30 GPIO1_A5/AP_PWROFF, R31 GPIO1_B0/SPI1_TXD/UART4_TX, T31 GPIO1_A1/ISP0_SHUTTER_TRIG/ISP1_SHUTTER_TRIG/TCPD_CC0_VCONN_EN
part U pins: AB8 APIO3_VDD_1V8, AD8 GPIO2_C4/SDIO0_D0/SPI5_RXD, AD9 GPIO2_D3/SDIO0_PWREN, AE8 GPIO2_C7/SDIO0_D3/SPI5_CSN0, AE9 GPIO2_C0/UART0_RX, AF7 GPIO2_D1/SDIO0_CLKOUT/TEST_CLKOUT1, AF8 GPIO2_D4/SDIO0_BKPWR, AG7 GPIO2_C6/SDIO0_D2/SPI5_CLK, AG8 GPIO2_C2/UART0_CTSN, AH6 GPIO2_D0/SDIO0_CMD, AH8 GPIO2_C1/UART0_TX, AK5 GPIO2_C5/SDIO0_D1/SPI5_TXD, AL4 GPIO2_D2/SDIO0_DETN/PCIE_CLKREQN, AL5 GPIO2_C3/UART0_RTSN
part V pins: AC8 APIO4_VDDPST, AC9 APIO4_VDD, AD7 GPIO4_C7/HDMI_CECINOUT/EDP_HOTPLUG, AE6 GPIO4_D0/PCIE_CLKREQNB, AF5 GPIO4_C2/PWM0/VOP0_PWM/VOP1_PWM, AG4 GPIO4_D6, AG6 GPIO4_C0/I2C3_SDA/UART2B_RX, AH3 GPIO4_D2, AH5 GPIO4_D4, AJ3 GPIO4_D5, AJ4 GPIO4_C4/UART2C_TX, AK1 GPIO4_C5/SPDIF_TX, AK2 GPIO4_C3/UART2C_RX, AK3 GPIO4_D3, AK4 GPIO4_D1/DP_HOTPLUG, AL2 GPIO4_C1/I2C3_SCL/UART2B_TX, AL3 GPIO4_C6/PWM1
part W pins: AA6 GPIO3_D5/I2S0_SDI2SDO2, AA7 GPIO4_A4/I2S1_LRCK_RX, AA8 APIO5_VDDPST, AC6 GPIO4_A7/I2S1_SDO0, AC7 GPIO4_A0/I2S_CLK, AD6 GPIO4_A6/I2S1_SDI0, AE5 GPIO3_D4/I2S0_SDI1SDO3, AF3 GPIO4_A3/I2S1_SCLK, AF4 GPIO3_D1/I2S0_LRCK_RX, AG1 GPIO4_A1/I2C1_SDA, AG3 GPIO3_D0/I2S0_SCLK, AH1 GPIO3_D7/I2S0_SDO0, AH2 GPIO3_D6/I2S0_SDI3SDO1, AJ1 GPIO4_A5/I2S1_LRCK_TX, AJ2 GPIO3_D2/I2S0_LRCK_TX, Y6 GPIO4_A2/I2C1_SCL, Y7 GPIO3_D3/I2S0_SDI0, Y8 APIO5_VDD
part X pins: AA27 PCIE_TX2_P, AA28 PCIE_TX2_N, AC27 PCIE_RX2_P, AC28 PCIE_RX2_N, AD27 PCIE_TX3_P, AD28 PCIE_TX3_N, AD30 PCIE_RCLK_100M_N, AD31 PCIE_RCLK_100M_P, AE30 PCIE_TX0_P, AE31 PCIE_TX0_N, AF27 PCIE_RX3_P, AF28 PCIE_RX3_N, AF30 PCIE_RX0_P, AF31 PCIE_RX0_N, AG30 PCIE_TX1_P, AG31 PCIE_TX1_N, AH30 PCIE_RX1_P, AH31 PCIE_RX1_N, W24 PCIE_AVDD_0V9, Y24 PCIE_AVDD_1V8
part Y pins: AA19 NC, AA20 NC, AA22 NC, AB20 NC, AB22 NC, AC12 NC, AC14 NC, AD11 NC, AD12 NC, AD14 NC, AD15 NC
part D text: DDRC0
part E text: DDRC1
part F text: eMMC
part G text: SDMMC
part I text: USB 2.0
part J text: USB 3.0
part K text: USB 3.0
part L text: SAR-ADC
part M text: Camera IF
part N text: MIPI CSI
part O text: MIPI CSI/DSI
part P text: HDMI
part Q text: eDP
part R text: MIPI DSI
part S text: GMAC

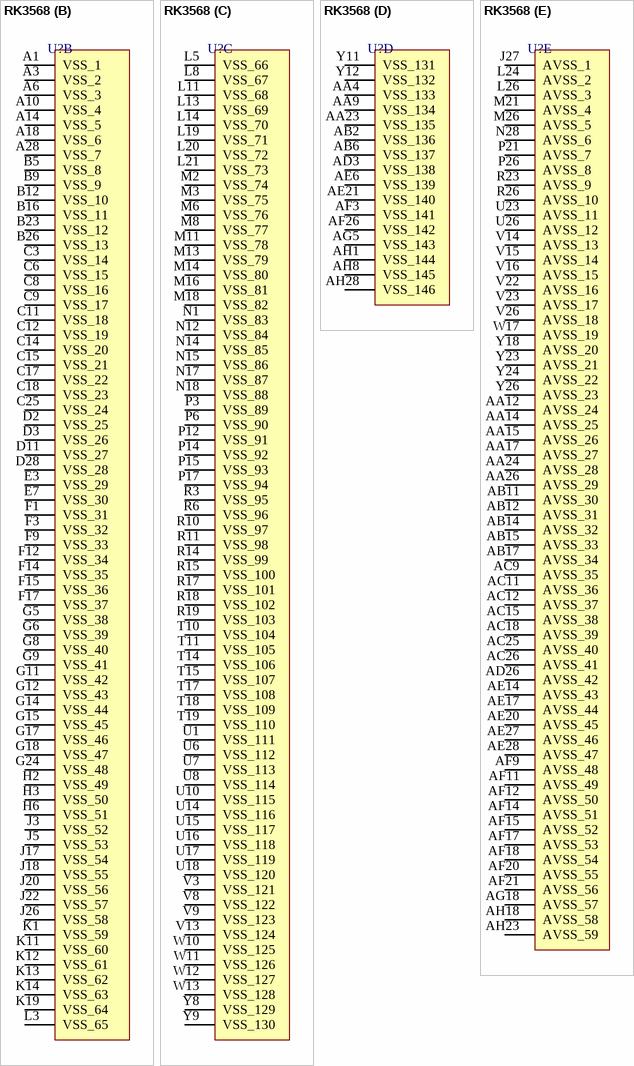
[diagram p24: symbol RK3568]

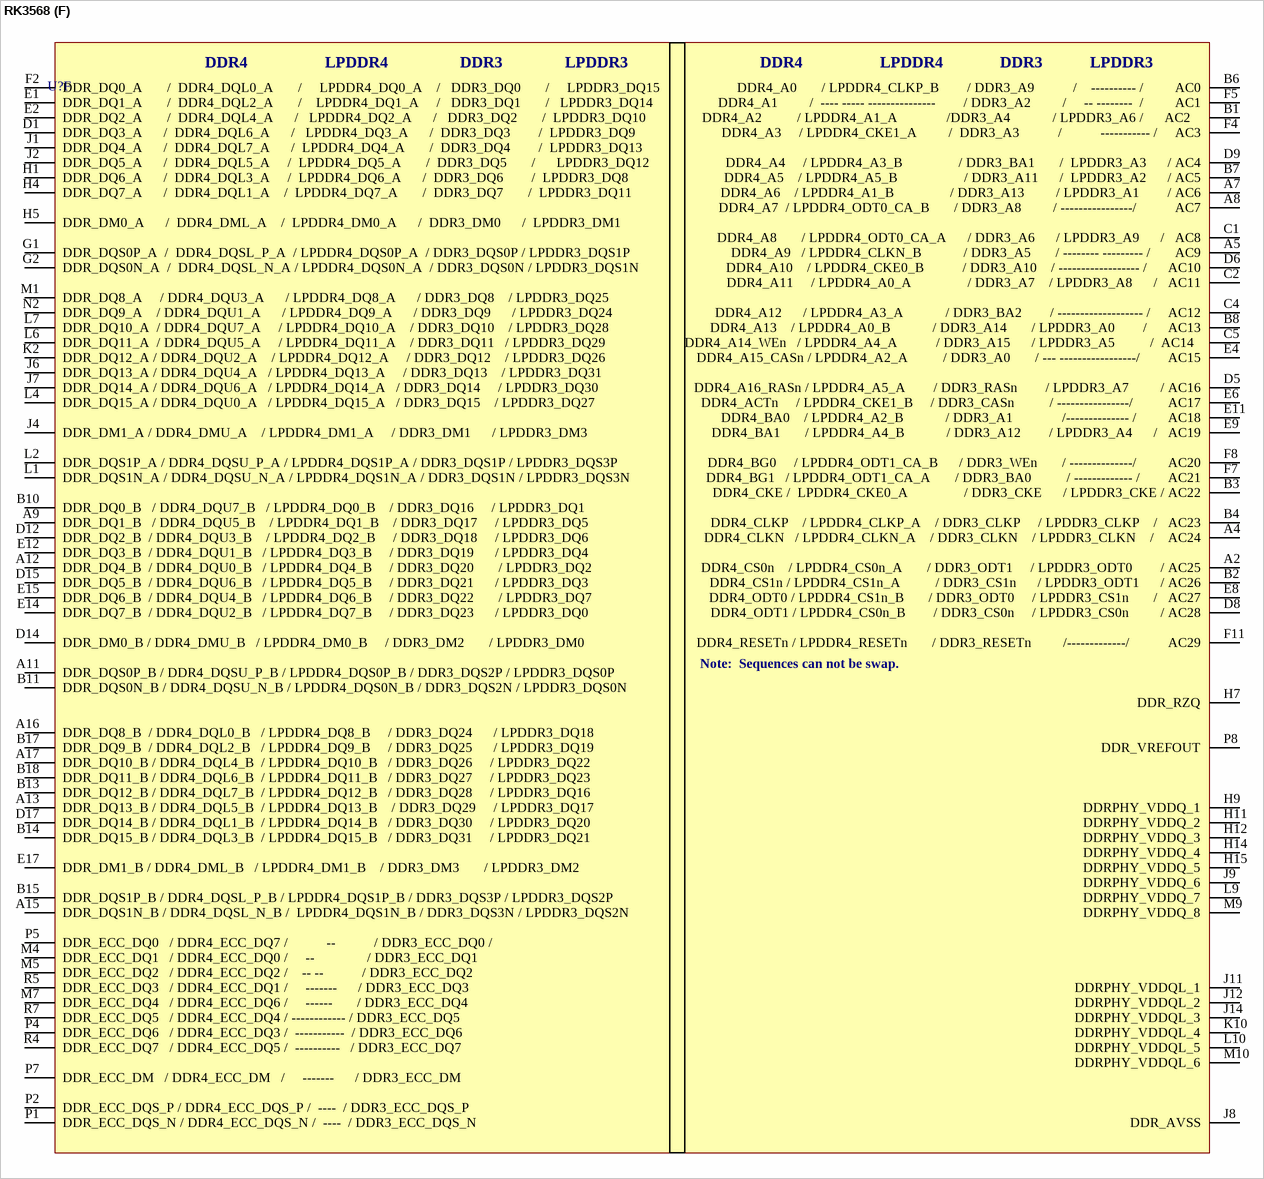
[diagram p25: symbol RK3568]

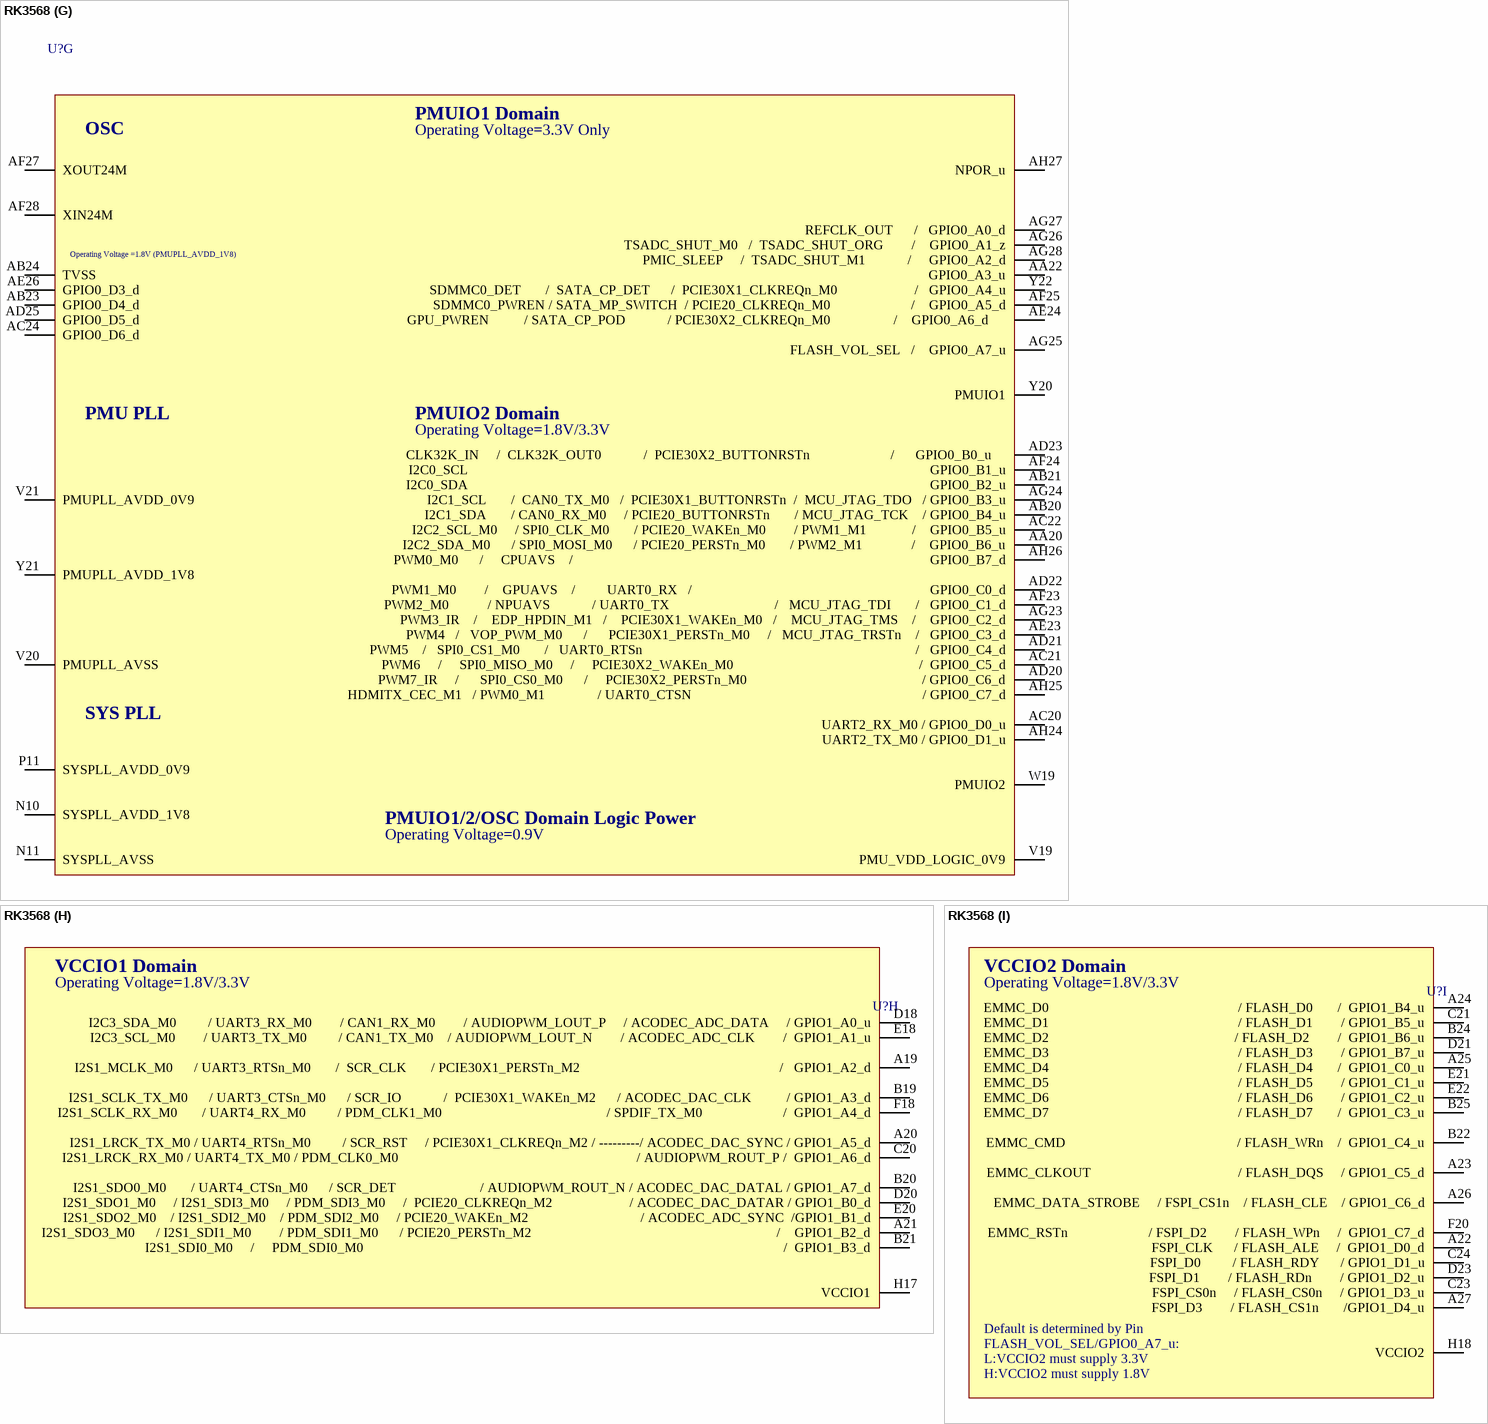
[diagram p26: symbol RK3568]

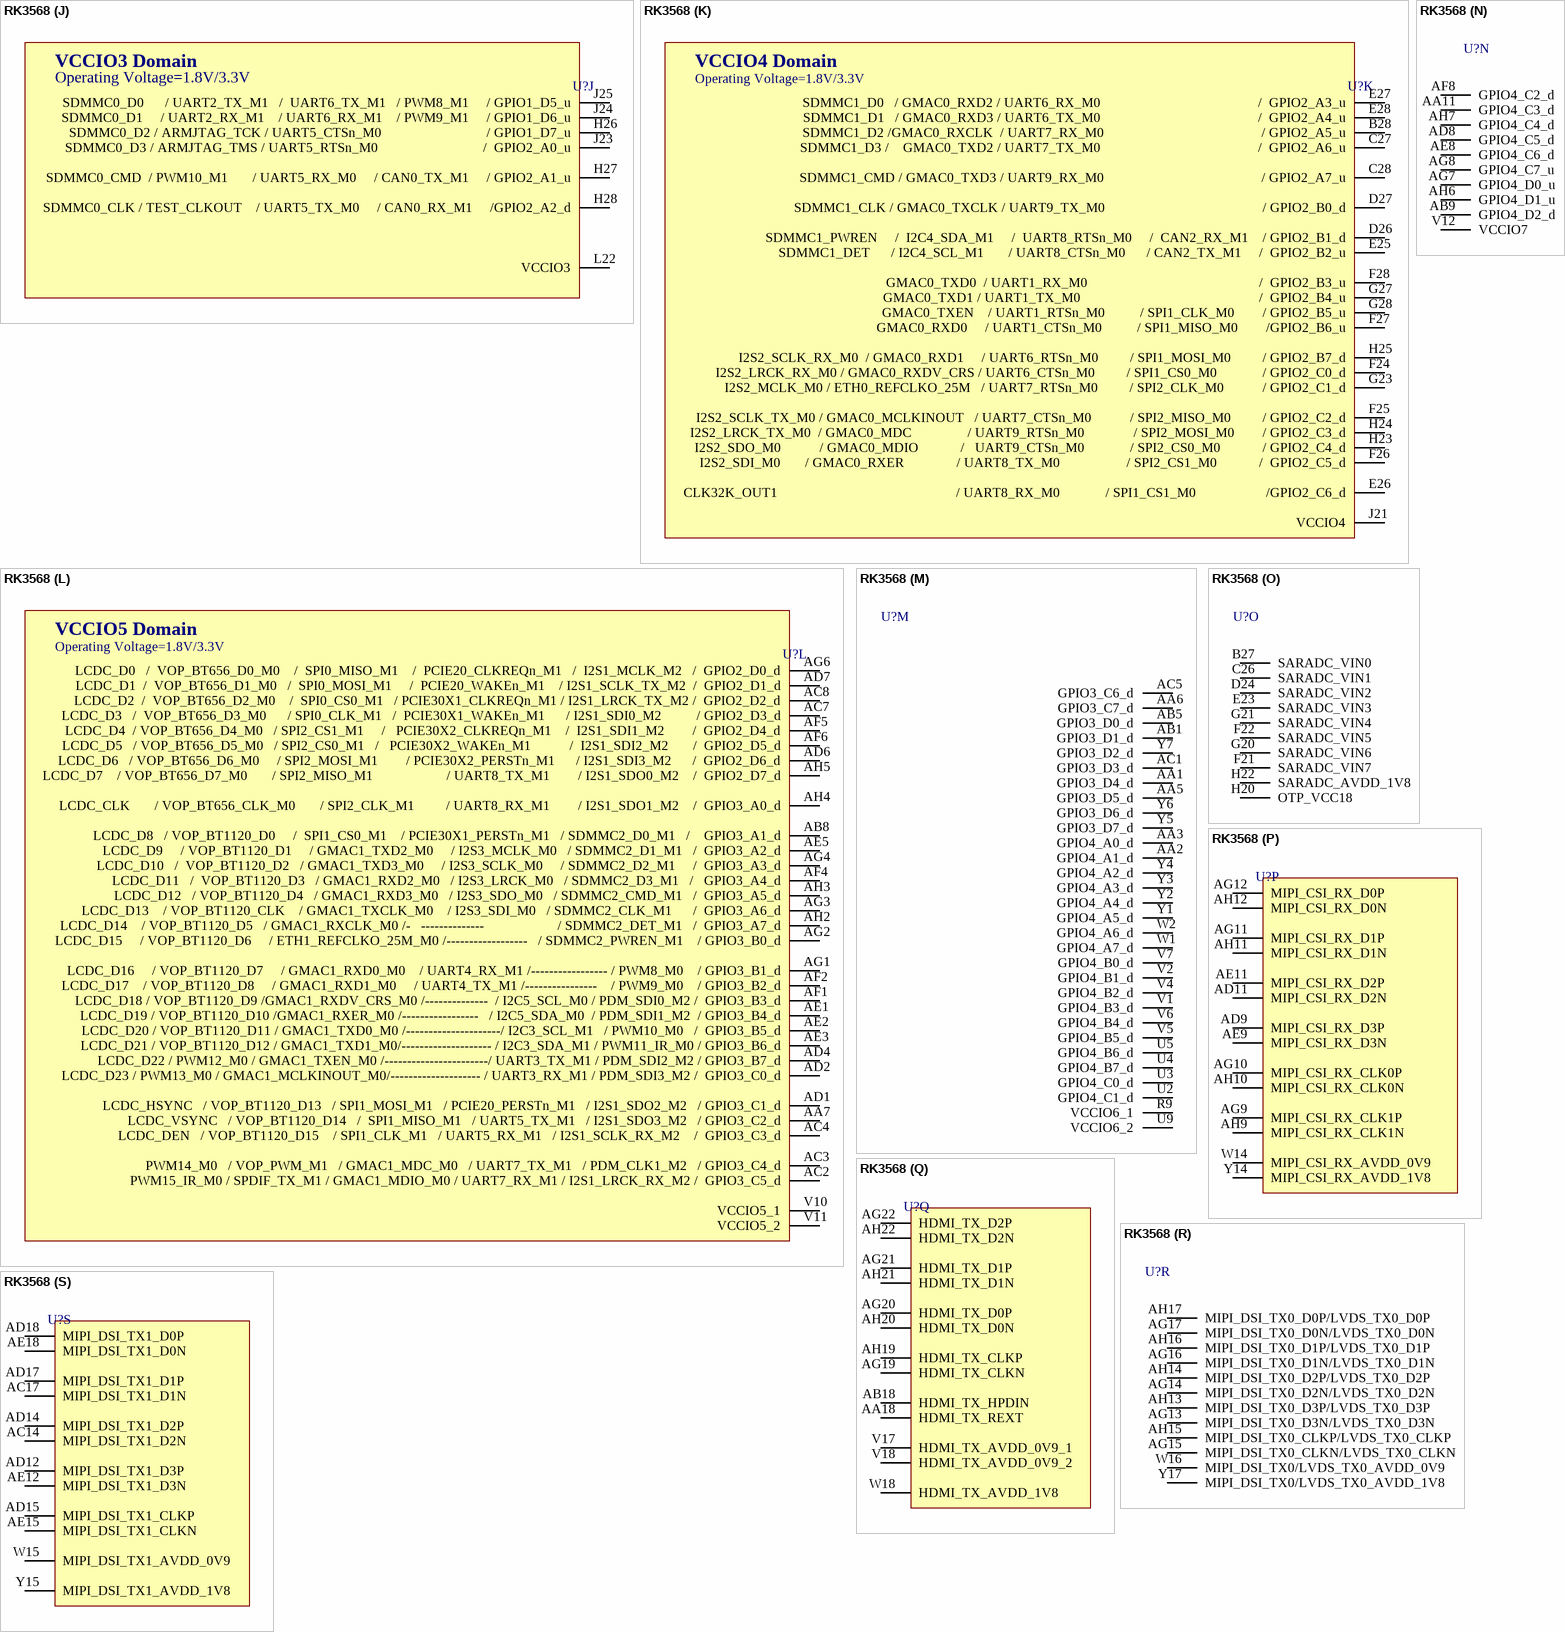
[diagram p27: symbol RK3568]

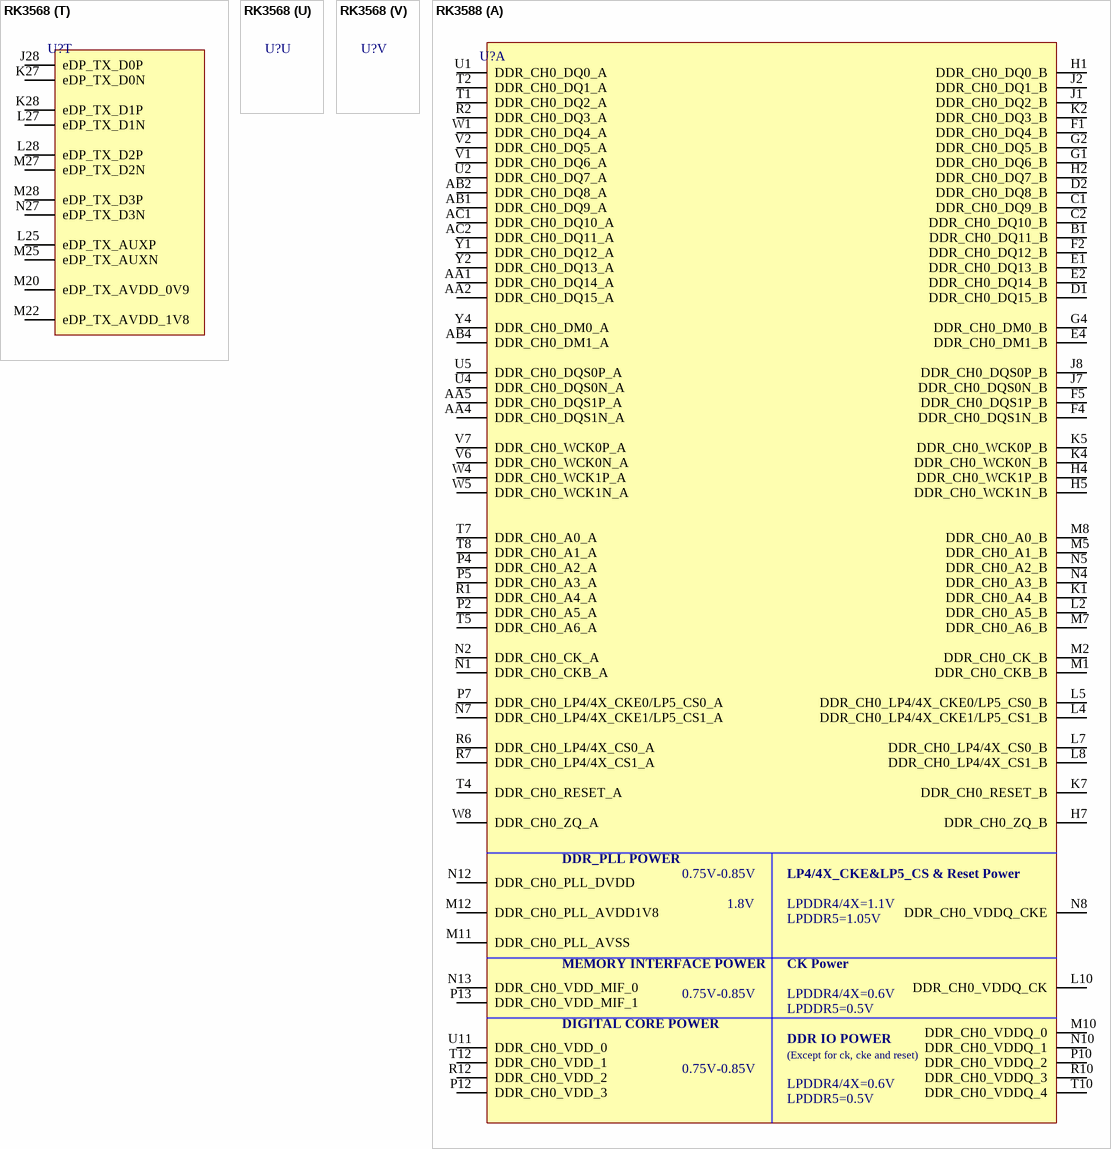
[diagram p28: symbols RK3568 to RK3588]

## RK3568
designator U?
RK3568 Power Management IC; Manufacturer: Rockchip; Manufacturer Part Number: RK3568; Package: FCBGA636L; Item Type: IC
part A pins: J15  VDD_CPU_1 , K15  VDD_CPU_2, K16 VDD_CPU_3, K17 VDD_CPU_4, K18 VDD_CPU_5, L12 VDD_LOGIC_1, L15 VDD_CPU_6, L16 VDD_CPU_7, L17 VDD_CPU_8, L18 VDD_CPU_9, M12 VDD_LOGIC_2, M15 VDD_CPU_COM, M17 VDD_CPU_10, M19 VDD_NPU_1, N13 VDD_LOGIC_3, N16 VDD_LOGIC_4, N19 VDD_NPU_2, P13 VDD_LOGIC_5, P16 VDD_LOGIC_6, P18 VDD_NPU_3, P19 VDD_NPU_4, P20 VDD_NPU_5, R12 VDD_LOGIC_7, R13 VDD_GPU_1, R16 VDD_LOGIC_8, T12 VDD_LOGIC_9, T13 VDD_GPU_2, T16 VDD_LOGIC_10, U11 VDD_GPU_3, U12 VDD_GPU_4, U13 VDD_GPU_5
part B pins: A1 VSS_1, A3 VSS_2, A6 VSS_3, A10 VSS_4, A14 VSS_5, A18 VSS_6, A28 VSS_7, B5 VSS_8, B9 VSS_9, B12 VSS_10, B16 VSS_11, B23 VSS_12, B26 VSS_13, C3 VSS_14, C6 VSS_15, C8 VSS_16, C9 VSS_17, C11 VSS_18, C12 VSS_19, C14 VSS_20, C15 VSS_21, C17 VSS_22, C18 VSS_23, C25 VSS_24, D2 VSS_25, D3 VSS_26, D11 VSS_27, D28 VSS_28, E3 VSS_29, E7 VSS_30, F1 VSS_31, F3 VSS_32, F9 VSS_33, F12 VSS_34, F14 VSS_35, F15 VSS_36, F17 VSS_37, G5 VSS_38, G6 VSS_39, G8 VSS_40, G9 VSS_41, G11 VSS_42, G12 VSS_43, G14 VSS_44, G15 VSS_45, G17 VSS_46, G18 VSS_47, G24 VSS_48, H2 VSS_49, H3 VSS_50, H6 VSS_51, J3 VSS_52, J5 VSS_53, J17 VSS_54, J18 VSS_55, J20 VSS_56, J22 VSS_57, J26 VSS_58, K1 VSS_59, K11 VSS_60, K12 VSS_61, K13 VSS_62, K14 VSS_63, K19 VSS_64, L3 VSS_65
part C pins: L5 VSS_66, L8 VSS_67, L11 VSS_68, L13 VSS_69, L14 VSS_70, L19 VSS_71, L20 VSS_72, L21 VSS_73, M2 VSS_74, M3 VSS_75, M6 VSS_76, M8 VSS_77, M11 VSS_78, M13 VSS_79, M14 VSS_80, M16 VSS_81, M18 VSS_82, N1 VSS_83, N12 VSS_84, N14 VSS_85, N15 VSS_86, N17 VSS_87, N18 VSS_88, P3 VSS_89, P6 VSS_90, P12 VSS_91, P14 VSS_92, P15 VSS_93, P17 VSS_94, R3 VSS_95, R6 VSS_96, R10 VSS_97, R11 VSS_98, R14 VSS_99, R15 VSS_100, R17 VSS_101, R18 VSS_102, R19 VSS_103, T10 VSS_104, T11 VSS_105, T14 VSS_106, T15 VSS_107, T17 VSS_108, T18 VSS_109, T19 VSS_110, U1 VSS_111, U6 VSS_112, U7 VSS_113, U8 VSS_114, U10 VSS_115, U14 VSS_116, U15 VSS_117, U16 VSS_118, U17 VSS_119, U18 VSS_120, V3 VSS_121, V8 VSS_122, V9 VSS_123, V13 VSS_124, W10 VSS_125, W11 VSS_126, W12 VSS_127, W13 VSS_128, Y8 VSS_129, Y9 VSS_130
part D pins: AA4 VSS_133, AA9 VSS_134, AA23 VSS_135, AB2 VSS_136, AB6 VSS_137, AD3 VSS_138, AE6 VSS_139, AE21 VSS_140, AF3 VSS_141, AF26 VSS_142, AG5 VSS_143, AH1 VSS_144, AH8 VSS_145, AH28 VSS_146, Y11 VSS_131, Y12 VSS_132
part E pins: AA12 AVSS_24, AA14 AVSS_25, AA15 AVSS_26, AA17 AVSS_27, AA24 AVSS_28, AA26 AVSS_29, AB11 AVSS_30, AB12 AVSS_31, AB14 AVSS_32, AB15 AVSS_33, AB17 AVSS_34, AC9 AVSS_35, AC11 AVSS_36, AC12 AVSS_37, AC15 AVSS_38, AC18 AVSS_39, AC25 AVSS_40, AC26 AVSS_41, AD26 AVSS_42, AE14 AVSS_43, AE17 AVSS_44, AE20 AVSS_45, AE27 AVSS_46, AE28 AVSS_47, AF9 AVSS_48, AF11 AVSS_49, AF12 AVSS_50, AF14 AVSS_51, AF15 AVSS_52, AF17 AVSS_53, AF18 AVSS_54, AF20 AVSS_55, AF21 AVSS_56, AG18 AVSS_57, AH18 AVSS_58, AH23 AVSS_59, J27 AVSS_1, L24 AVSS_2, L26 AVSS_3, M21 AVSS_4, M26 AVSS_5, N28 AVSS_6, P21 AVSS_7, P26 AVSS_8, R23 AVSS_9, R26 AVSS_10, U23 AVSS_11, U26 AVSS_12, V14 AVSS_13, V15 AVSS_14, V16 AVSS_15, V22 AVSS_16, V23 AVSS_17, V26 AVSS_18, W17 AVSS_19, Y18 AVSS_20, Y23 AVSS_21, Y24 AVSS_22, Y26 AVSS_23
part F pins: A2 DDR4_CS0n    / LPDDR4_CS0n_A       / DDR3_ODT1     / LPDDR3_ODT0        / AC25, A4 DDR4_CLKN   / LPDDR4_CLKN_A    / DDR3_CLKN    / LPDDR3_CLKN    /    AC24, A5 DDR4_A9   / LPDDR4_CLKN_B            / DDR3_A5       / -------- --------- /       AC9, A7 DDR4_A6    / LPDDR4_A1_B                / DDR3_A13         / LPDDR3_A1        / AC6, A8 DDR4_A7  / LPDDR4_ODT0_CA_B       / DDR3_A8         / ----------------/           AC7, A9 DDR_DQ1_B   / DDR4_DQU5_B    / LPDDR4_DQ1_B    / DDR3_DQ17     / LPDDR3_DQ5, A11 DDR_DQS0P_B / DDR4_DQSU_P_B / LPDDR4_DQS0P_B / DDR3_DQS2P / LPDDR3_DQS0P, A12 DDR_DQ4_B  / DDR4_DQU0_B   / LPDDR4_DQ4_B     / DDR3_DQ20       / LPDDR3_DQ2  , A13 DDR_DQ13_B / DDR4_DQL5_B  / LPDDR4_DQ13_B    / DDR3_DQ29     / LPDDR3_DQ17, A15 DDR_DQS1N_B / DDR4_DQSL_N_B /  LPDDR4_DQS1N_B / DDR3_DQS3N / LPDDR3_DQS2N , A16 DDR_DQ8_B  / DDR4_DQL0_B   / LPDDR4_DQ8_B     / DDR3_DQ24      / LPDDR3_DQ18, A17 DDR_DQ10_B / DDR4_DQL4_B  / LPDDR4_DQ10_B   / DDR3_DQ26     / LPDDR3_DQ22 , B1 DDR4_A2          / LPDDR4_A1_A              /DDR3_A4            / LPDDR3_A6 /      AC2   , B2 DDR4_CS1n / LPDDR4_CS1n_A          / DDR3_CS1n      / LPDDR3_ODT1      / AC26, B3 DDR4_CKE /  LPDDR4_CKE0_A                / DDR3_CKE      / LPDDR3_CKE / AC22, B4 DDR4_CLKP    / LPDDR4_CLKP_A    / DDR3_CLKP     / LPDDR3_CLKP    /   AC23, B6 DDR4_A0       / LPDDR4_CLKP_B        / DDR3_A9           /    ---------- /         AC0, B7 DDR4_A5    / LPDDR4_A5_B                   / DDR3_A11      /  LPDDR3_A2      / AC5, B8 DDR4_A13    / LPDDR4_A0_B            / DDR3_A14       / LPDDR3_A0        /      AC13, B10 DDR_DQ0_B   / DDR4_DQU7_B   / LPDDR4_DQ0_B    / DDR3_DQ16     / LPDDR3_DQ1 , B11 DDR_DQS0N_B / DDR4_DQSU_N_B / LPDDR4_DQS0N_B / DDR3_DQS2N / LPDDR3_DQS0N , B13 DDR_DQ12_B / DDR4_DQL7_B  / LPDDR4_DQ12_B   / DDR3_DQ28     / LPDDR3_DQ16 , B14 DDR_DQ15_B / DDR4_DQL3_B  / LPDDR4_DQ15_B   / DDR3_DQ31     / LPDDR3_DQ21, B15 DDR_DQS1P_B / DDR4_DQSL_P_B / LPDDR4_DQS1P_B / DDR3_DQS3P / LPDDR3_DQS2P , B17 DDR_DQ9_B  / DDR4_DQL2_B   / LPDDR4_DQ9_B     / DDR3_DQ25      / LPDDR3_DQ19 , B18 DDR_DQ11_B / DDR4_DQL6_B  / LPDDR4_DQ11_B   / DDR3_DQ27     / LPDDR3_DQ23, C1 DDR4_A8       / LPDDR4_ODT0_CA_A      / DDR3_A6      / LPDDR3_A9      /   AC8, C2 DDR4_A11     / LPDDR4_A0_A                / DDR3_A7    / LPDDR3_A8      /   AC11, C4 DDR4_A12      / LPDDR4_A3_A            / DDR3_BA2        / ------------------- /     AC12, C5 DDR4_A14_WEn   / LPDDR4_A4_A           / DDR3_A15      / LPDDR3_A5          /  AC14  , D1 DDR_DQ3_A      /  DDR4_DQL6_A      /   LPDDR4_DQ3_A      /  DDR3_DQ3        /  LPDDR3_DQ9 , D5 DDR4_A16_RASn / LPDDR4_A5_A        / DDR3_RASn        / LPDDR3_A7         / AC16, D6 DDR4_A10    / LPDDR4_CKE0_B           / DDR3_A10    / ------------------ /      AC10, D8 DDR4_ODT1 / LPDDR4_CS0n_B        / DDR3_CS0n     / LPDDR3_CS0n         / AC28, D9 DDR4_A4     / LPDDR4_A3_B                / DDR3_BA1       /  LPDDR3_A3      / AC4, D12 DDR_DQ2_B  / DDR4_DQU3_B    / LPDDR4_DQ2_B     / DDR3_DQ18     / LPDDR3_DQ6, D14 DDR_DM0_B / DDR4_DMU_B   / LPDDR4_DM0_B     / DDR3_DM2       / LPDDR3_DM0, D15 DDR_DQ5_B  / DDR4_DQU6_B   / LPDDR4_DQ5_B     / DDR3_DQ21      / LPDDR3_DQ3, D17 DDR_DQ14_B / DDR4_DQL1_B  / LPDDR4_DQ14_B   / DDR3_DQ30     / LPDDR3_DQ20 , E1 DDR_DQ1_A       /  DDR4_DQL2_A       /    LPDDR4_DQ1_A     /   DDR3_DQ1       /   LPDDR3_DQ14 , E2 DDR_DQ2_A       /  DDR4_DQL4_A      /   LPDDR4_DQ2_A      /   DDR3_DQ2       /  LPDDR3_DQ10 , E4 DDR4_A15_CASn / LPDDR4_A2_A          / DDR3_A0       / --- -----------------/        AC15, E6 DDR4_ACTn     / LPDDR4_CKE1_B     / DDR3_CASn          / ----------------/          AC17, E8 DDR4_ODT0 / LPDDR4_CS1n_B       / DDR3_ODT0     / LPDDR3_CS1n       /   AC27, E9 DDR4_BA1       / LPDDR4_A4_B            / DDR3_A12        / LPDDR3_A4      /   AC19, E11 DDR4_BA0    / LPDDR4_A2_B            / DDR3_A1              /-------------- /         AC18, E12 DDR_DQ3_B  / DDR4_DQU1_B   / LPDDR4_DQ3_B     / DDR3_DQ19      / LPDDR3_DQ4 , E14 DDR_DQ7_B  / DDR4_DQU2_B   / LPDDR4_DQ7_B     / DDR3_DQ23      / LPDDR3_DQ0 , E15 DDR_DQ6_B  / DDR4_DQU4_B   / LPDDR4_DQ6_B     / DDR3_DQ22       / LPDDR3_DQ7, E17 DDR_DM1_B / DDR4_DML_B   / LPDDR4_DM1_B    / DDR3_DM3       / LPDDR3_DM2, F2 DDR_DQ0_A       /  DDR4_DQL0_A       /     LPDDR4_DQ0_A    /   DDR3_DQ0       /     LPDDR3_DQ15, F4 DDR4_A3     / LPDDR4_CKE1_A         /  DDR3_A3           /           ----------- /     AC3, F5 DDR4_A1         /  ---- ----- ---------------        / DDR3_A2         /     -- --------  /         AC1, F7 DDR4_BG1   / LPDDR4_ODT1_CA_A       / DDR3_BA0          / ------------- /        AC21, F8 DDR4_BG0     / LPDDR4_ODT1_CA_B      / DDR3_WEn       / --------------/         AC20, F11 DDR4_RESETn / LPDDR4_RESETn       / DDR3_RESETn         /-------------/           AC29, G1 DDR_DQS0P_A  /  DDR4_DQSL_P_A  / LPDDR4_DQS0P_A  / DDR3_DQS0P / LPDDR3_DQS1P, G2 DDR_DQS0N_A  /  DDR4_DQSL_N_A / LPDDR4_DQS0N_A  / DDR3_DQS0N / LPDDR3_DQS1N, H1 DDR_DQ6_A      /  DDR4_DQL3_A     /  LPDDR4_DQ6_A      /  DDR3_DQ6        /  LPDDR3_DQ8  , H4 DDR_DQ7_A      /  DDR4_DQL1_A    /  LPDDR4_DQ7_A       /  DDR3_DQ7       /  LPDDR3_DQ11  , H5 DDR_DM0_A      /  DDR4_DML_A    /  LPDDR4_DM0_A      /  DDR3_DM0      /  LPDDR3_DM1, H7 DDR_RZQ, H9 DDRPHY_VDDQ_1, H11 DDRPHY_VDDQ_2, H12 DDRPHY_VDDQ_3, H14 DDRPHY_VDDQ_4, H15 DDRPHY_VDDQ_5, J1 DDR_DQ4_A      /  DDR4_DQL7_A      /  LPDDR4_DQ4_A       /  DDR3_DQ4        /  LPDDR3_DQ13, J2 DDR_DQ5_A      /  DDR4_DQL5_A     /  LPDDR4_DQ5_A       /  DDR3_DQ5       /      LPDDR3_DQ12 , J4 DDR_DM1_A / DDR4_DMU_A    / LPDDR4_DM1_A     / DDR3_DM1      / LPDDR3_DM3 , J6 DDR_DQ13_A / DDR4_DQU4_A   / LPDDR4_DQ13_A     / DDR3_DQ13    / LPDDR3_DQ31, J7 DDR_DQ14_A / DDR4_DQU6_A   / LPDDR4_DQ14_A   / DDR3_DQ14     / LPDDR3_DQ30, J8 DDR_AVSS, J9 DDRPHY_VDDQ_6, J11 DDRPHY_VDDQL_1, J12 DDRPHY_VDDQL_2, J14 DDRPHY_VDDQL_3, K2 DDR_DQ12_A / DDR4_DQU2_A    / LPDDR4_DQ12_A     / DDR3_DQ12    / LPDDR3_DQ26, K10 DDRPHY_VDDQL_4, L1 DDR_DQS1N_A / DDR4_DQSU_N_A / LPDDR4_DQS1N_A / DDR3_DQS1N / LPDDR3_DQS3N , L2 DDR_DQS1P_A / DDR4_DQSU_P_A / LPDDR4_DQS1P_A / DDR3_DQS1P / LPDDR3_DQS3P, L4 DDR_DQ15_A / DDR4_DQU0_A   / LPDDR4_DQ15_A   / DDR3_DQ15    / LPDDR3_DQ27, L6 DDR_DQ11_A  / DDR4_DQU5_A     / LPDDR4_DQ11_A    / DDR3_DQ11   / LPDDR3_DQ29, L7 DDR_DQ10_A  / DDR4_DQU7_A     / LPDDR4_DQ10_A    / DDR3_DQ10    / LPDDR3_DQ28, L9 DDRPHY_VDDQ_7, L10 DDRPHY_VDDQL_5, M1 DDR_DQ8_A     / DDR4_DQU3_A      / LPDDR4_DQ8_A      / DDR3_DQ8    / LPDDR3_DQ25, M4 DDR_ECC_DQ1   / DDR4_ECC_DQ0 /     --               / DDR3_ECC_DQ1, M5 DDR_ECC_DQ2   / DDR4_ECC_DQ2 /    -- --           / DDR3_ECC_DQ2, M7 DDR_ECC_DQ4   / DDR4_ECC_DQ6 /     ------       / DDR3_ECC_DQ4, M9 DDRPHY_VDDQ_8, M10 DDRPHY_VDDQL_6, N2 DDR_DQ9_A    / DDR4_DQU1_A      / LPDDR4_DQ9_A      / DDR3_DQ9      / LPDDR3_DQ24, P1 DDR_ECC_DQS_N / DDR4_ECC_DQS_N /  ----  / DDR3_ECC_DQS_N, P2 DDR_ECC_DQS_P / DDR4_ECC_DQS_P /  ----  / DDR3_ECC_DQS_P, P4 DDR_ECC_DQ6   / DDR4_ECC_DQ3 /  -----------  / DDR3_ECC_DQ6, P5 DDR_ECC_DQ0   / DDR4_ECC_DQ7 /           --           / DDR3_ECC_DQ0 /        , P7 DDR_ECC_DM   / DDR4_ECC_DM   /     -------      / DDR3_ECC_DM, P8 DDR_VREFOUT, R4 DDR_ECC_DQ7   / DDR4_ECC_DQ5 /  ----------   / DDR3_ECC_DQ7, R5 DDR_ECC_DQ3   / DDR4_ECC_DQ1 /     -------      / DDR3_ECC_DQ3, R7 DDR_ECC_DQ5   / DDR4_ECC_DQ4 / ------------ / DDR3_ECC_DQ5
part G pins: AA20 I2C2_SDA_M0      / SPI0_MOSI_M0      / PCIE20_PERSTn_M0       / PWM2_M1              /    GPIO0_B6_u, AA22 GPIO0_A3_u, AB20 I2C1_SDA       / CAN0_RX_M0     / PCIE20_BUTTONRSTn       / MCU_JTAG_TCK    / GPIO0_B4_u, AB21 I2C0_SDA                                                                                                                                    GPIO0_B2_u, AB23 GPIO0_D4_d, AB24 TVSS, AC20 UART2_RX_M0 / GPIO0_D0_u, AC21 PWM6     /     SPI0_MISO_M0     /     PCIE30X2_WAKEn_M0                                                     /  GPIO0_C5_d, AC22 I2C2_SCL_M0     / SPI0_CLK_M0       / PCIE20_WAKEn_M0        / PWM1_M1             /    GPIO0_B5_u, AC24 GPIO0_D6_d, AD20 PWM7_IR     /      SPI0_CS0_M0      /     PCIE30X2_PERSTn_M0                                                  / GPIO0_C6_d, AD21 PWM5    /   SPI0_CS1_M0       /   UART0_RTSn                                                                              /   GPIO0_C4_d, AD22 PWM1_M0        /    GPUAVS    /         UART0_RX   /                                                                    GPIO0_C0_d, AD23 CLK32K_IN     /  CLK32K_OUT0            /  PCIE30X2_BUTTONRSTn                       /      GPIO0_B0_u    , AD25 GPIO0_D5_d, AE23 PWM4   /   VOP_PWM_M0      /      PCIE30X1_PERSTn_M0     /   MCU_JTAG_TRSTn    /   GPIO0_C3_d, AE24  GPU_PWREN          / SATA_CP_POD            / PCIE30X2_CLKREQn_M0                  /    GPIO0_A6_d     , AE26 GPIO0_D3_d, AF23 PWM2_M0           / NPUAVS            / UART0_TX                              /   MCU_JTAG_TDI       /   GPIO0_C1_d, AF24 I2C0_SCL                                                                                                                                    GPIO0_B1_u, AF25 SDMMC0_PWREN / SATA_MP_SWITCH  / PCIE20_CLKREQn_M0                       /    GPIO0_A5_d, AF27 XOUT24M, AF28 XIN24M, AG23 PWM3_IR    /    EDP_HPDIN_M1   /    PCIE30X1_WAKEn_M0   /    MCU_JTAG_TMS    /    GPIO0_C2_d, AG24 I2C1_SCL       /  CAN0_TX_M0   /  PCIE30X1_BUTTONRSTn  /  MCU_JTAG_TDO   / GPIO0_B3_u, AG25 FLASH_VOL_SEL   /    GPIO0_A7_u, AG26 TSADC_SHUT_M0   /  TSADC_SHUT_ORG        /    GPIO0_A1_z, AG27 REFCLK_OUT      /   GPIO0_A0_d, AG28 PMIC_SLEEP     /  TSADC_SHUT_M1            /     GPIO0_A2_d, AH24 UART2_TX_M0 / GPIO0_D1_u, AH25 HDMITX_CEC_M1   / PWM0_M1               / UART0_CTSN                                                                  / GPIO0_C7_d, AH26 PWM0_M0      /     CPUAVS    /                                                                                                      GPIO0_B7_d, AH27 NPOR_u, N10 SYSPLL_AVDD_1V8, N11 SYSPLL_AVSS, P11 SYSPLL_AVDD_0V9, V19 PMU_VDD_LOGIC_0V9, V20 PMUPLL_AVSS, V21 PMUPLL_AVDD_0V9, W19 PMUIO2, Y20 PMUIO1, Y21 PMUPLL_AVDD_1V8, Y22 SDMMC0_DET       /  SATA_CP_DET      /  PCIE30X1_CLKREQn_M0                      /   GPIO0_A4_u
part H pins: A19 I2S1_MCLK_M0      / UART3_RTSn_M0       /  SCR_CLK       / PCIE30X1_PERSTn_M2                                                         /   GPIO1_A2_d, A20 I2S1_LRCK_TX_M0 / UART4_RTSn_M0         / SCR_RST     / PCIE30X1_CLKREQn_M2 / ---------/ ACODEC_DAC_SYNC / GPIO1_A5_d, A21 I2S1_SDO3_M0      / I2S1_SDI1_M0        / PDM_SDI1_M0      / PCIE20_PERSTn_M2                                                                      /    GPIO1_B2_d, B19 I2S1_SCLK_TX_M0      / UART3_CTSn_M0      / SCR_IO            /  PCIE30X1_WAKEn_M2      / ACODEC_DAC_CLK          / GPIO1_A3_d, B20  I2S1_SDO0_M0       / UART4_CTSn_M0      / SCR_DET                        / AUDIOPWM_ROUT_N / ACODEC_DAC_DATAL / GPIO1_A7_d, B21 I2S1_SDI0_M0     /     PDM_SDI0_M0                                                                                                                        /  GPIO1_B3_d, C20 I2S1_LRCK_RX_M0 / UART4_TX_M0 / PDM_CLK0_M0                                                                    / AUDIOPWM_ROUT_P /  GPIO1_A6_d, D18 I2C3_SDA_M0         / UART3_RX_M0        / CAN1_RX_M0        / AUDIOPWM_LOUT_P     / ACODEC_ADC_DATA     / GPIO1_A0_u, D20 I2S1_SDO1_M0     / I2S1_SDI3_M0     / PDM_SDI3_M0     /  PCIE20_CLKREQn_M2                      / ACODEC_DAC_DATAR / GPIO1_B0_d, E18 I2C3_SCL_M0        / UART3_TX_M0         / CAN1_TX_M0    / AUDIOPWM_LOUT_N        / ACODEC_ADC_CLK        /  GPIO1_A1_u, E20 I2S1_SDO2_M0    / I2S1_SDI2_M0    / PDM_SDI2_M0     / PCIE20_WAKEn_M2                                / ACODEC_ADC_SYNC  /GPIO1_B1_d, F18 I2S1_SCLK_RX_M0       / UART4_RX_M0         / PDM_CLK1_M0                                               / SPDIF_TX_M0                       /  GPIO1_A4_d, H17 VCCIO1
part I pins: A22 FSPI_CLK      / FLASH_ALE     /  GPIO1_D0_d, A23 EMMC_CLKOUT                                          / FLASH_DQS     / GPIO1_C5_d, A24 EMMC_D0                                                      / FLASH_D0       /  GPIO1_B4_u, A25 EMMC_D4                                                      / FLASH_D4       /  GPIO1_C0_u, A26 EMMC_DATA_STROBE     / FSPI_CS1n    / FLASH_CLE    / GPIO1_C6_d, A27 FSPI_D3        / FLASH_CS1n       /GPIO1_D4_u, B22 EMMC_CMD                                                 / FLASH_WRn    /  GPIO1_C4_u, B24 EMMC_D2                                                     / FLASH_D2        /  GPIO1_B6_u, B25 EMMC_D7                                                      / FLASH_D7       /  GPIO1_C3_u, C21 EMMC_D1                                                      / FLASH_D1        / GPIO1_B5_u, C23 FSPI_CS0n     / FLASH_CS0n     / GPIO1_D3_u, C24 FSPI_D0         / FLASH_RDY      / GPIO1_D1_u, D21 EMMC_D3                                                      / FLASH_D3        / GPIO1_B7_u, D23 FSPI_D1        / FLASH_RDn        / GPIO1_D2_u, E21 EMMC_D5                                                      / FLASH_D5        / GPIO1_C1_u, E22 EMMC_D6                                                      / FLASH_D6        / GPIO1_C2_u, F20 EMMC_RSTn                       / FSPI_D2        / FLASH_WPn     /  GPIO1_C7_d, H18 VCCIO2
part J pins: H26 SDMMC0_D2 / ARMJTAG_TCK / UART5_CTSn_M0                              / GPIO1_D7_u, H27 SDMMC0_CMD  / PWM10_M1       / UART5_RX_M0     / CAN0_TX_M1     / GPIO2_A1_u, H28 SDMMC0_CLK / TEST_CLKOUT    / UART5_TX_M0     / CAN0_RX_M1     /GPIO2_A2_d, J23 SDMMC0_D3 / ARMJTAG_TMS / UART5_RTSn_M0                              /  GPIO2_A0_u, J24 SDMMC0_D1     / UART2_RX_M1    / UART6_RX_M1    / PWM9_M1     / GPIO1_D6_u, J25 SDMMC0_D0      / UART2_TX_M1   /  UART6_TX_M1   / PWM8_M1     / GPIO1_D5_u, L22 VCCIO3
part K pins: B28 SDMMC1_D2 /GMAC0_RXCLK  / UART7_RX_M0                                             / GPIO2_A5_u, C27 SDMMC1_D3 /    GMAC0_TXD2 / UART7_TX_M0                                             /  GPIO2_A6_u, C28 SDMMC1_CMD / GMAC0_TXD3 / UART9_RX_M0                                             / GPIO2_A7_u, D26 SDMMC1_PWREN     /  I2C4_SDA_M1     /  UART8_RTSn_M0     /  CAN2_RX_M1    / GPIO2_B1_d, D27 SDMMC1_CLK / GMAC0_TXCLK / UART9_TX_M0                                             / GPIO2_B0_d, E25 SDMMC1_DET      / I2C4_SCL_M1       / UART8_CTSn_M0      / CAN2_TX_M1     /  GPIO2_B2_u, E26 CLK32K_OUT1                                                   / UART8_RX_M0             / SPI1_CS1_M0                    /GPIO2_C6_d, E27 SDMMC1_D0   / GMAC0_RXD2 / UART6_RX_M0                                             /  GPIO2_A3_u, E28 SDMMC1_D1   / GMAC0_RXD3 / UART6_TX_M0                                             /  GPIO2_A4_u, F24 I2S2_LRCK_RX_M0 / GMAC0_RXDV_CRS / UART6_CTSn_M0         / SPI1_CS0_M0             / GPIO2_C0_d, F25 I2S2_SCLK_TX_M0 / GMAC0_MCLKINOUT   / UART7_CTSn_M0           / SPI2_MISO_M0         / GPIO2_C2_d, F26 I2S2_SDI_M0       / GMAC0_RXER               / UART8_TX_M0                   / SPI2_CS1_M0            /  GPIO2_C5_d, F27 GMAC0_RXD0     / UART1_CTSn_M0          / SPI1_MISO_M0        /GPIO2_B6_u, F28 GMAC0_TXD0  / UART1_RX_M0                                                 /  GPIO2_B3_u, G23 I2S2_MCLK_M0 / ETH0_REFCLKO_25M   / UART7_RTSn_M0         / SPI2_CLK_M0           / GPIO2_C1_d, G27 GMAC0_TXD1 / UART1_TX_M0                                                   /  GPIO2_B4_u, G28 GMAC0_TXEN    / UART1_RTSn_M0          / SPI1_CLK_M0        / GPIO2_B5_u, H23 I2S2_SDO_M0           / GMAC0_MDIO            /   UART9_CTSn_M0             / SPI2_CS0_M0            / GPIO2_C4_d, H24 I2S2_LRCK_TX_M0  / GMAC0_MDC                / UART9_RTSn_M0              / SPI2_MOSI_M0        / GPIO2_C3_d, H25 I2S2_SCLK_RX_M0  / GMAC0_RXD1     / UART6_RTSn_M0         / SPI1_MOSI_M0         / GPIO2_B7_d, J21 VCCIO4
part L pins: AA7 LCDC_VSYNC   / VOP_BT1120_D14   /  SPI1_MISO_M1   / UART5_TX_M1   / I2S1_SDO3_M2   / GPIO3_C2_d, AB8 LCDC_D8   / VOP_BT1120_D0     /  SPI1_CS0_M1    / PCIE30X1_PERSTn_M1   / SDMMC2_D0_M1   /    GPIO3_A1_d, AC2 PWM15_IR_M0 / SPDIF_TX_M1 / GMAC1_MDIO_M0 / UART7_RX_M1 / I2S1_LRCK_RX_M2 /  GPIO3_C5_d, AC3 PWM14_M0   / VOP_PWM_M1   / GMAC1_MDC_M0   / UART7_TX_M1   / PDM_CLK1_M2   / GPIO3_C4_d, AC4 LCDC_DEN   / VOP_BT1120_D15    / SPI1_CLK_M1   / UART5_RX_M1   / I2S1_SCLK_RX_M2    /  GPIO3_C3_d, AC7 LCDC_D3   /  VOP_BT656_D3_M0      / SPI0_CLK_M1   /  PCIE30X1_WAKEn_M1      / I2S1_SDI0_M2          / GPIO2_D3_d, AC8 LCDC_D2  /  VOP_BT656_D2_M0    /  SPI0_CS0_M1   / PCIE30X1_CLKREQn_M1 / I2S1_LRCK_TX_M2 /  GPIO2_D2_d, AD1 LCDC_HSYNC   / VOP_BT1120_D13   / SPI1_MOSI_M1   / PCIE20_PERSTn_M1   / I2S1_SDO2_M2   / GPIO3_C1_d, AD2 LCDC_D23 / PWM13_M0 / GMAC1_MCLKINOUT_M0/-------------------- / UART3_RX_M1 / PDM_SDI3_M2 /  GPIO3_C0_d, AD4 LCDC_D22 / PWM12_M0 / GMAC1_TXEN_M0 /-----------------------/ UART3_TX_M1 / PDM_SDI2_M2 / GPIO3_B7_d, AD6 LCDC_D6   / VOP_BT656_D6_M0     / SPI2_MOSI_M1        / PCIE30X2_PERSTn_M1      / I2S1_SDI3_M2      /  GPIO2_D6_d, AD7 LCDC_D1  /  VOP_BT656_D1_M0   /  SPI0_MOSI_M1     /  PCIE20_WAKEn_M1    / I2S1_SCLK_TX_M2  /  GPIO2_D1_d, AE1 LCDC_D19 / VOP_BT1120_D10 /GMAC1_RXER_M0 /-----------------   / I2C5_SDA_M0  / PDM_SDI1_M2  / GPIO3_B4_d, AE2 LCDC_D20 / VOP_BT1120_D11 / GMAC1_TXD0_M0 /---------------------/ I2C3_SCL_M1   / PWM10_M0   /  GPIO3_B5_d, AE3 LCDC_D21 / VOP_BT1120_D12 / GMAC1_TXD1_M0/-------------------- / I2C3_SDA_M1 / PWM11_IR_M0 / GPIO3_B6_d, AE5 LCDC_D9     / VOP_BT1120_D1     / GMAC1_TXD2_M0     / I2S3_MCLK_M0   / SDMMC2_D1_M1   /  GPIO3_A2_d, AF1 LCDC_D18 / VOP_BT1120_D9 /GMAC1_RXDV_CRS_M0 /--------------  / I2C5_SCL_M0 / PDM_SDI0_M2 /  GPIO3_B3_d, AF2 LCDC_D17    / VOP_BT1120_D8     / GMAC1_RXD1_M0     / UART4_TX_M1 /----------------    / PWM9_M0    / GPIO3_B2_d, AF4 LCDC_D11   /  VOP_BT1120_D3   / GMAC1_RXD2_M0   / I2S3_LRCK_M0   / SDMMC2_D3_M1   /   GPIO3_A4_d, AF5 LCDC_D4  / VOP_BT656_D4_M0   / SPI2_CS1_M1     /   PCIE30X2_CLKREQn_M1    /  I2S1_SDI1_M2        /  GPIO2_D4_d, AF6 LCDC_D5   / VOP_BT656_D5_M0   / SPI2_CS0_M1   /   PCIE30X2_WAKEn_M1           /  I2S1_SDI2_M2       /  GPIO2_D5_d, AG1 LCDC_D16     / VOP_BT1120_D7     / GMAC1_RXD0_M0    / UART4_RX_M1 /----------------- / PWM8_M0    / GPIO3_B1_d, AG2 LCDC_D15     / VOP_BT1120_D6     / ETH1_REFCLKO_25M_M0 /------------------   / SDMMC2_PWREN_M1    / GPIO3_B0_d, AG3 LCDC_D13    / VOP_BT1120_CLK    / GMAC1_TXCLK_M0    / I2S3_SDI_M0   / SDMMC2_CLK_M1      /  GPIO3_A6_d, AG4 LCDC_D10   /  VOP_BT1120_D2   / GMAC1_TXD3_M0     / I2S3_SCLK_M0     / SDMMC2_D2_M1     /  GPIO3_A3_d, AG6 LCDC_D0   /  VOP_BT656_D0_M0    /  SPI0_MISO_M1    /  PCIE20_CLKREQn_M1   /  I2S1_MCLK_M2   /  GPIO2_D0_d, AH2 LCDC_D14    / VOP_BT1120_D5   / GMAC1_RXCLK_M0 /-   --------------                     / SDMMC2_DET_M1   /  GPIO3_A7_d, AH3 LCDC_D12   / VOP_BT1120_D4   / GMAC1_RXD3_M0   / I2S3_SDO_M0   / SDMMC2_CMD_M1   /  GPIO3_A5_d, AH4 LCDC_CLK       / VOP_BT656_CLK_M0       / SPI2_CLK_M1         / UART8_RX_M1        / I2S1_SDO1_M2    /  GPIO3_A0_d, AH5 LCDC_D7    / VOP_BT656_D7_M0       / SPI2_MISO_M1                     / UART8_TX_M1        / I2S1_SDO0_M2    /  GPIO2_D7_d, V10 VCCIO5_1, V11 VCCIO5_2
part M pins: AA1 GPIO3_D4_d, AA2 GPIO4_A1_d, AA3 GPIO4_A0_d, AA5 GPIO3_D5_d, AA6 GPIO3_C7_d, AB1 GPIO3_D1_d, AB5 GPIO3_D0_d, AC1 GPIO3_D3_d, AC5 GPIO3_C6_d, R9 VCCIO6_1, U2 GPIO4_C1_d, U3 GPIO4_C0_d, U4 GPIO4_B7_d, U5 GPIO4_B6_d, U9 VCCIO6_2, V1 GPIO4_B3_d, V2 GPIO4_B1_d, V4 GPIO4_B2_d, V5 GPIO4_B5_d, V6 GPIO4_B4_d, V7 GPIO4_B0_d, W1 GPIO4_A7_d, W2 GPIO4_A6_d, Y1 GPIO4_A5_d, Y2 GPIO4_A4_d, Y3 GPIO4_A3_d, Y4 GPIO4_A2_d, Y5 GPIO3_D7_d, Y6 GPIO3_D6_d, Y7 GPIO3_D2_d
part N pins: AA11 GPIO4_C3_d, AB9 GPIO4_D2_d, AD8 GPIO4_C5_d, AE8 GPIO4_C6_d, AF8 GPIO4_C2_d, AG7 GPIO4_D0_u, AG8 GPIO4_C7_u, AH6 GPIO4_D1_u, AH7 GPIO4_C4_d, V12 VCCIO7
part O pins: B27 SARADC_VIN0, C26 SARADC_VIN1, D24 SARADC_VIN2, E23 SARADC_VIN3, F21 SARADC_VIN7, F22 SARADC_VIN5, G20 SARADC_VIN6, G21 SARADC_VIN4, H20 OTP_VCC18, H22 SARADC_AVDD_1V8
part P pins: AD9 MIPI_CSI_RX_D3P, AD11 MIPI_CSI_RX_D2N, AE9 MIPI_CSI_RX_D3N, AE11 MIPI_CSI_RX_D2P, AG9 MIPI_CSI_RX_CLK1P, AG10 MIPI_CSI_RX_CLK0P, AG11 MIPI_CSI_RX_D1P, AG12 MIPI_CSI_RX_D0P, AH9 MIPI_CSI_RX_CLK1N, AH10 MIPI_CSI_RX_CLK0N, AH11 MIPI_CSI_RX_D1N, AH12 MIPI_CSI_RX_D0N, W14 MIPI_CSI_RX_AVDD_0V9, Y14 MIPI_CSI_RX_AVDD_1V8
part Q pins: AA18 HDMI_TX_REXT, AB18 HDMI_TX_HPDIN, AG19 HDMI_TX_CLKN, AG20 HDMI_TX_D0P, AG21 HDMI_TX_D1P, AG22 HDMI_TX_D2P, AH19 HDMI_TX_CLKP, AH20 HDMI_TX_D0N, AH21 HDMI_TX_D1N, AH22 HDMI_TX_D2N, V17 HDMI_TX_AVDD_0V9_1, V18 HDMI_TX_AVDD_0V9_2, W18 HDMI_TX_AVDD_1V8
part R pins: AG13 MIPI_DSI_TX0_D3N/LVDS_TX0_D3N, AG14 MIPI_DSI_TX0_D2N/LVDS_TX0_D2N, AG15 MIPI_DSI_TX0_CLKN/LVDS_TX0_CLKN, AG16 MIPI_DSI_TX0_D1N/LVDS_TX0_D1N, AG17 MIPI_DSI_TX0_D0N/LVDS_TX0_D0N, AH13 MIPI_DSI_TX0_D3P/LVDS_TX0_D3P, AH14 MIPI_DSI_TX0_D2P/LVDS_TX0_D2P, AH15 MIPI_DSI_TX0_CLKP/LVDS_TX0_CLKP, AH16 MIPI_DSI_TX0_D1P/LVDS_TX0_D1P, AH17 MIPI_DSI_TX0_D0P/LVDS_TX0_D0P, W16 MIPI_DSI_TX0/LVDS_TX0_AVDD_0V9, Y17 MIPI_DSI_TX0/LVDS_TX0_AVDD_1V8
part S pins: AC14 MIPI_DSI_TX1_D2N, AC17 MIPI_DSI_TX1_D1N, AD12 MIPI_DSI_TX1_D3P, AD14 MIPI_DSI_TX1_D2P, AD15 MIPI_DSI_TX1_CLKP, AD17 MIPI_DSI_TX1_D1P, AD18 MIPI_DSI_TX1_D0P, AE12 MIPI_DSI_TX1_D3N, AE15 MIPI_DSI_TX1_CLKN, AE18 MIPI_DSI_TX1_D0N, W15 MIPI_DSI_TX1_AVDD_0V9, Y15 MIPI_DSI_TX1_AVDD_1V8
part T pins: J28 eDP_TX_D0P, K27 eDP_TX_D0N, K28 eDP_TX_D1P, L25 eDP_TX_AUXP, L27 eDP_TX_D1N, L28 eDP_TX_D2P, M20 eDP_TX_AVDD_0V9, M22 eDP_TX_AVDD_1V8, M25 eDP_TX_AUXN, M27 eDP_TX_D2N, M28 eDP_TX_D3P, N27 eDP_TX_D3N
part F text: DDR4; LPDDR4; DDR3; LPDDR3; Note:  Sequences can not be swap.
part G text: PMUIO1 Domain; OSC; Operating Voltage=3.3V Only; Operating Voltage =1.8V (PMUPLL_AVDD_1V8); PMU PLL; PMUIO2 Domain; Operating Voltage=1.8V/3.3V; SYS PLL; PMUIO1/2/OSC Domain Logic Power; Operating Voltage=0.9V
part H text: VCCIO1 Domain; Operating Voltage=1.8V/3.3V
part I text: VCCIO2 Domain; Operating Voltage=1.8V/3.3V; Default is determined by Pin; FLASH_VOL_SEL/GPIO0_A7_u:; L:VCCIO2 must supply 3.3V; H:VCCIO2 must supply 1.8V
part J text: VCCIO3 Domain; Operating Voltage=1.8V/3.3V
part K text: VCCIO4 Domain; Operating Voltage=1.8V/3.3V
part L text: VCCIO5 Domain; Operating Voltage=1.8V/3.3V

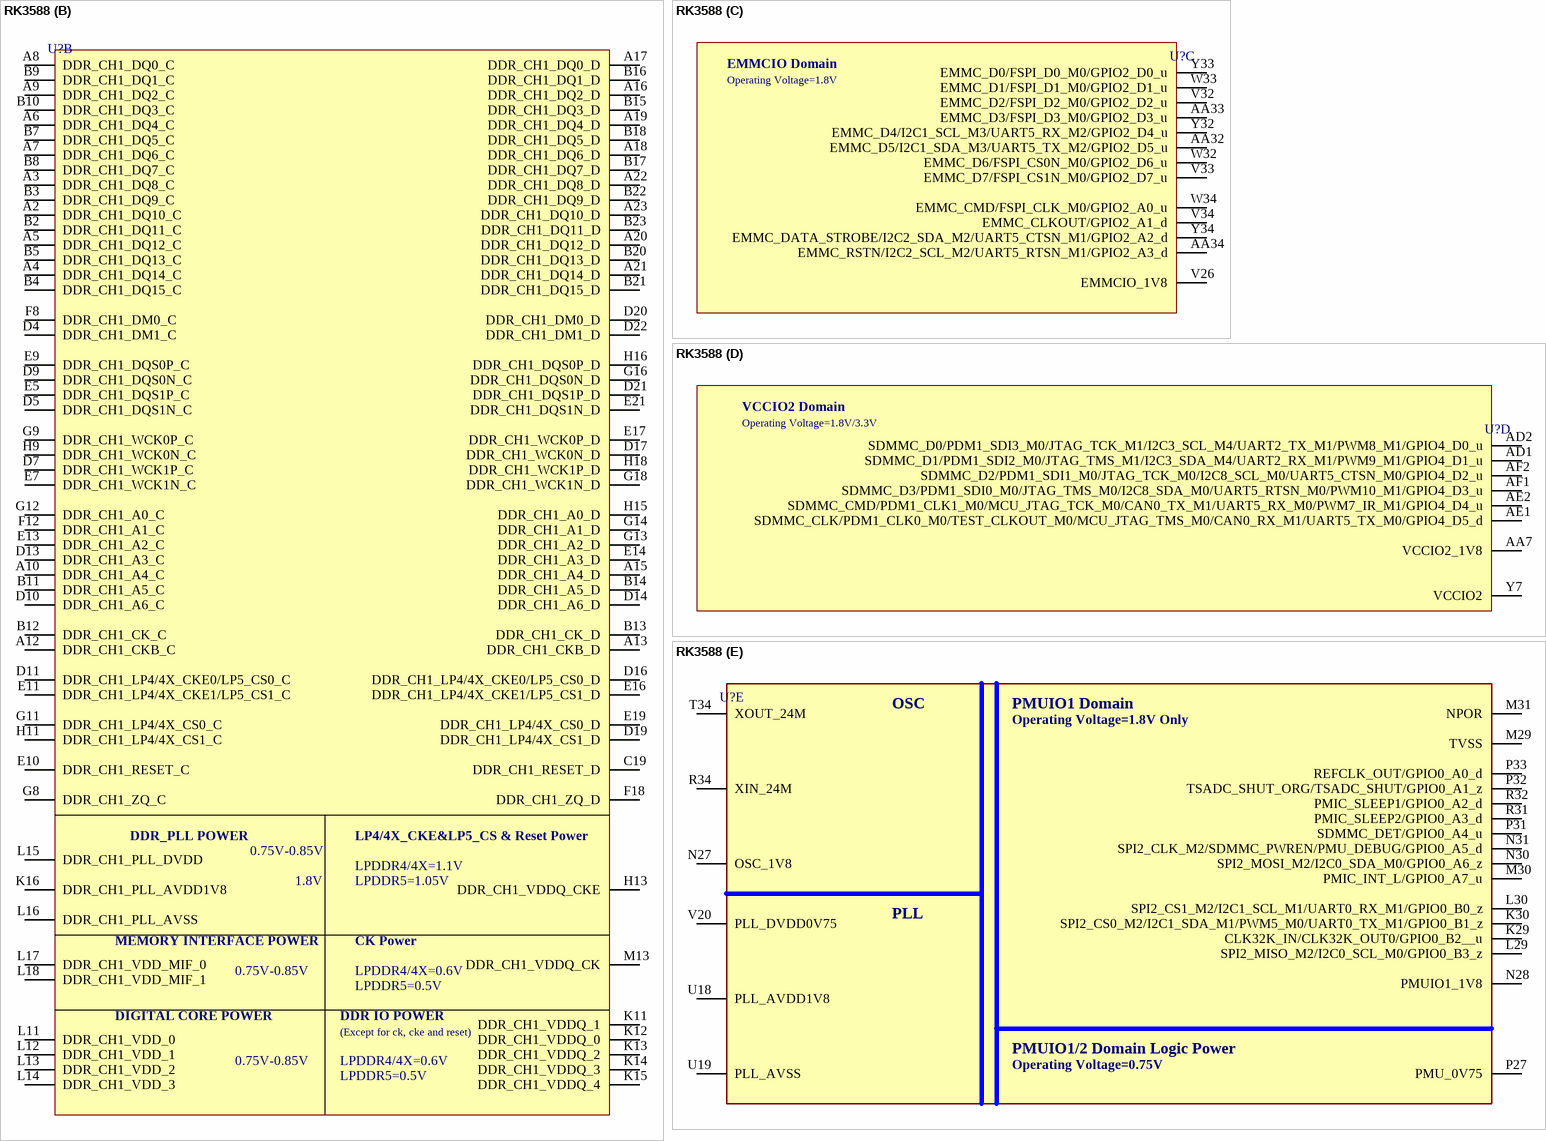
[diagram p29: symbol RK3588]

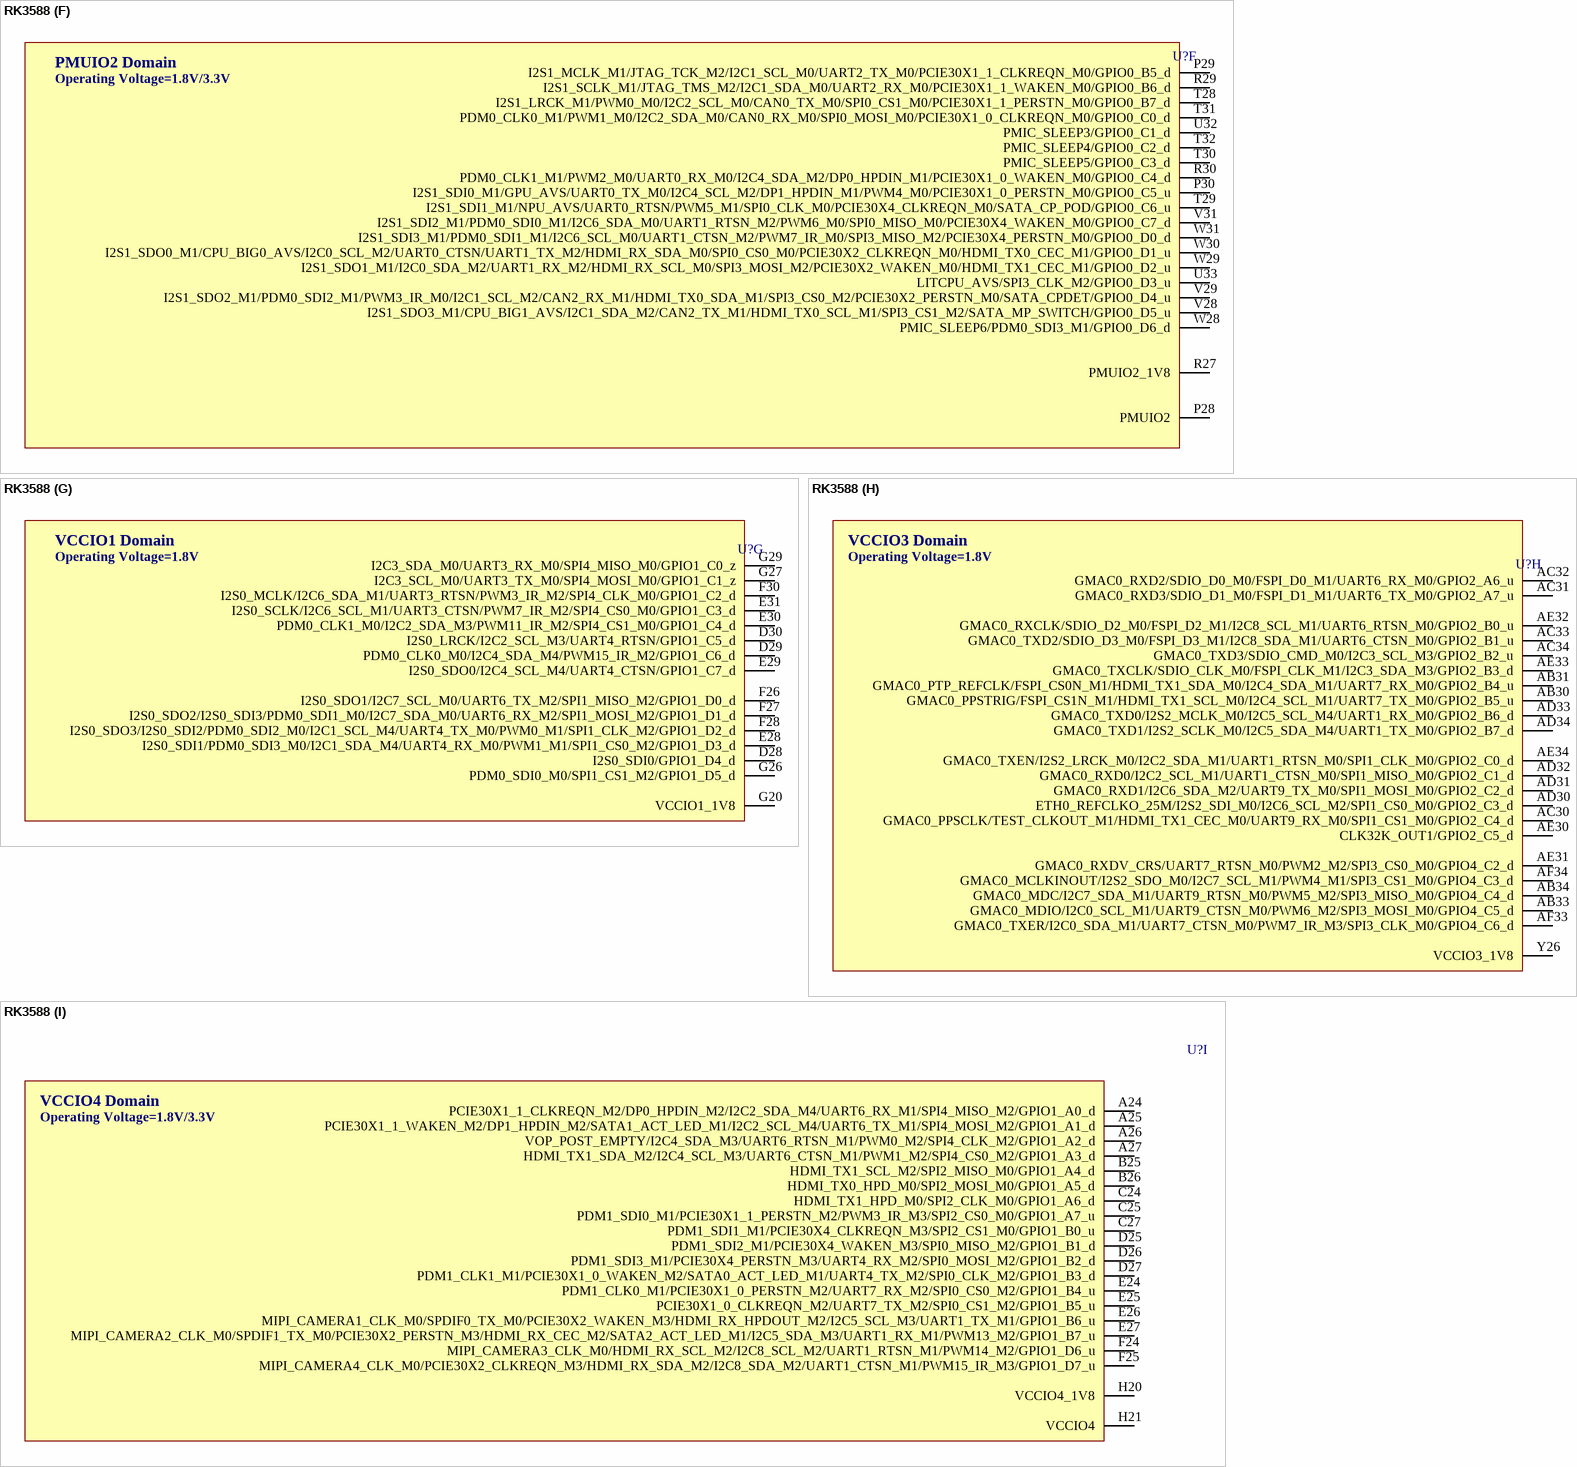
[diagram p30: symbol RK3588]

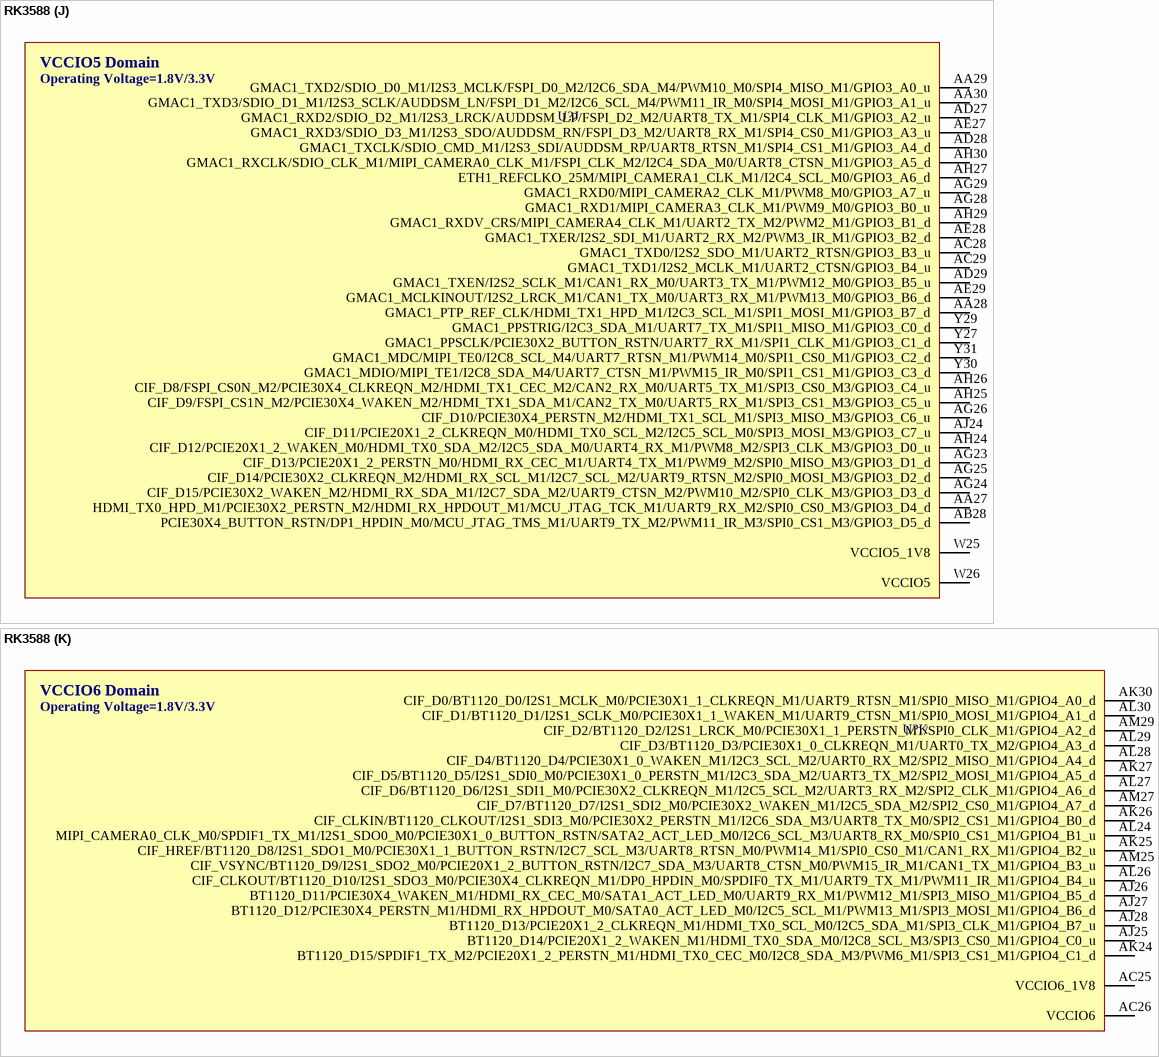
[diagram p31: symbol RK3588]

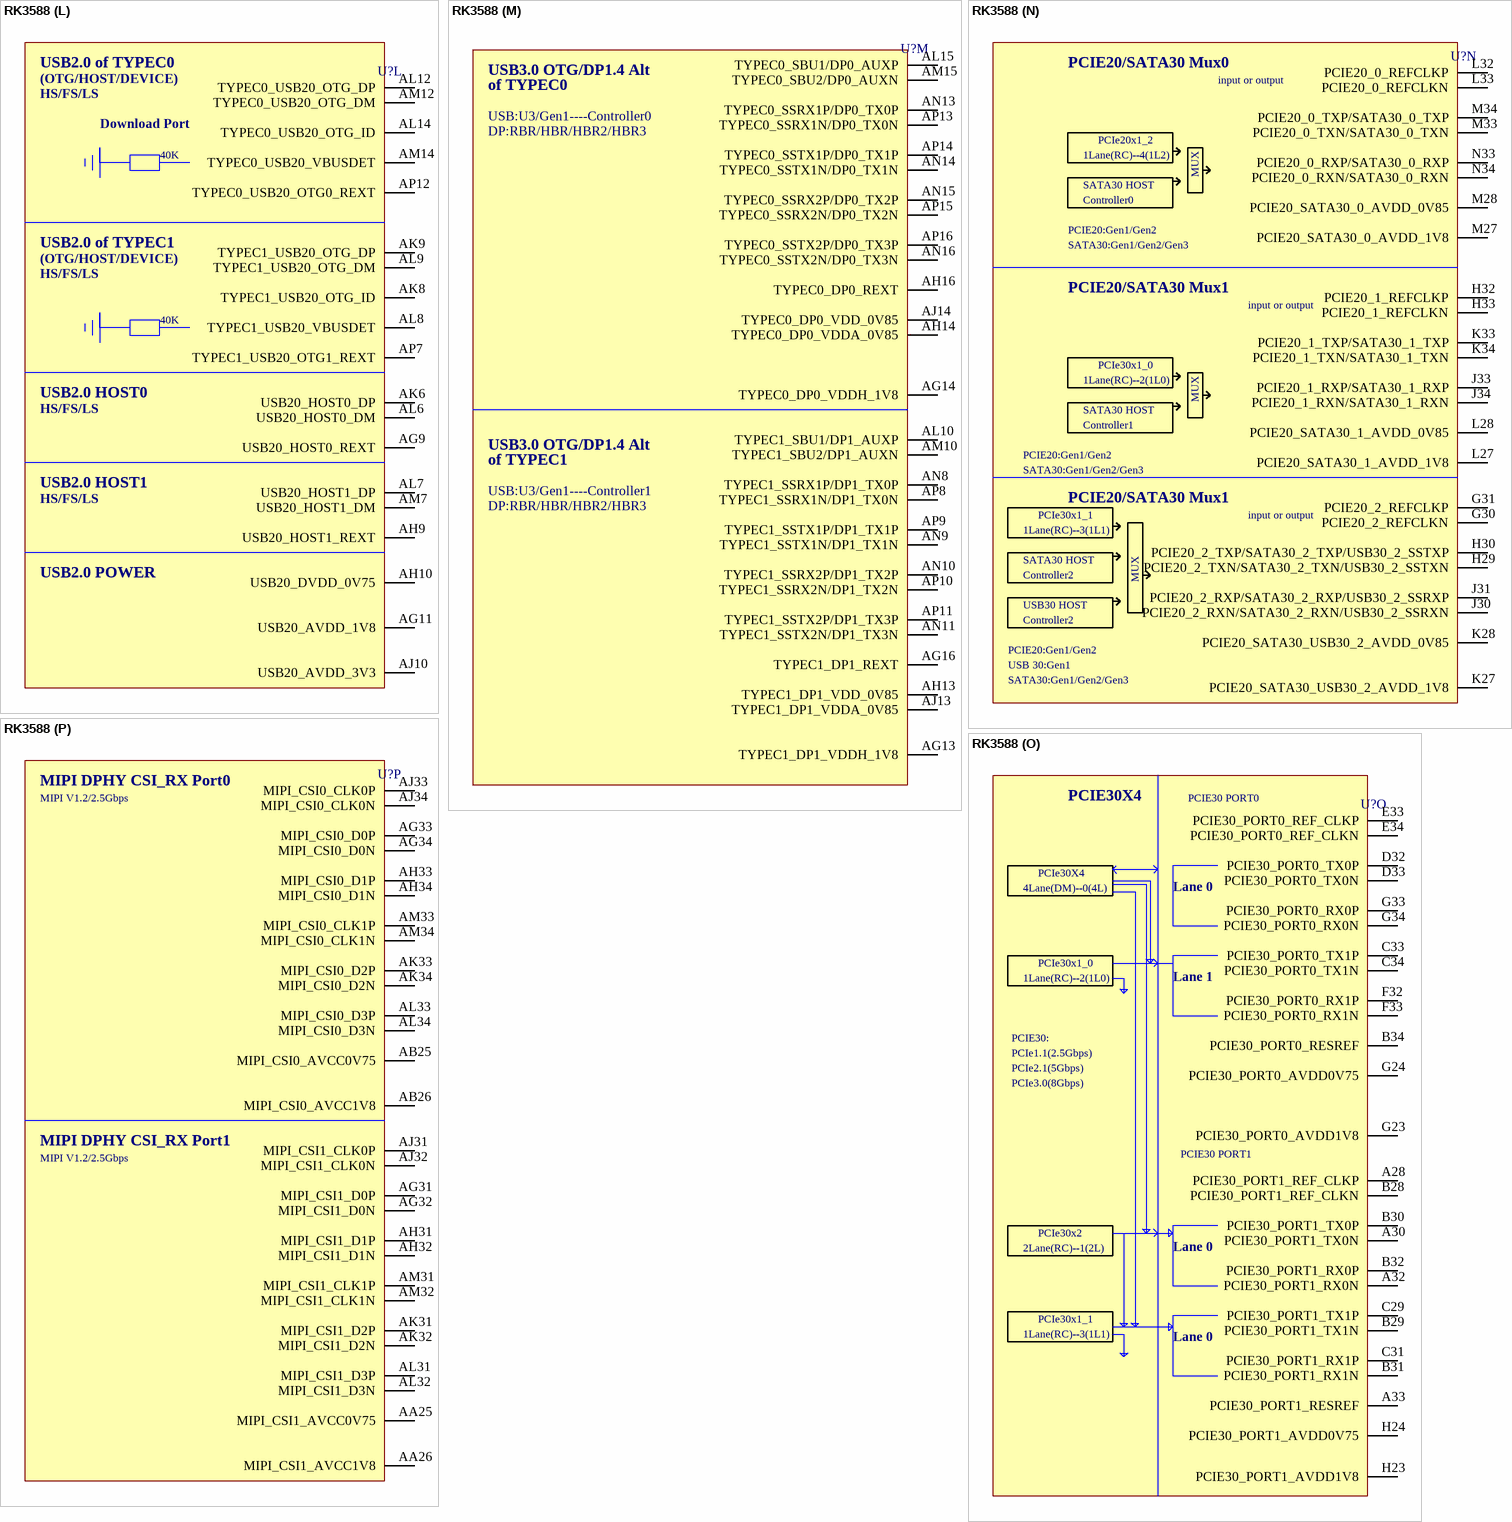
[diagram p32: symbol RK3588]

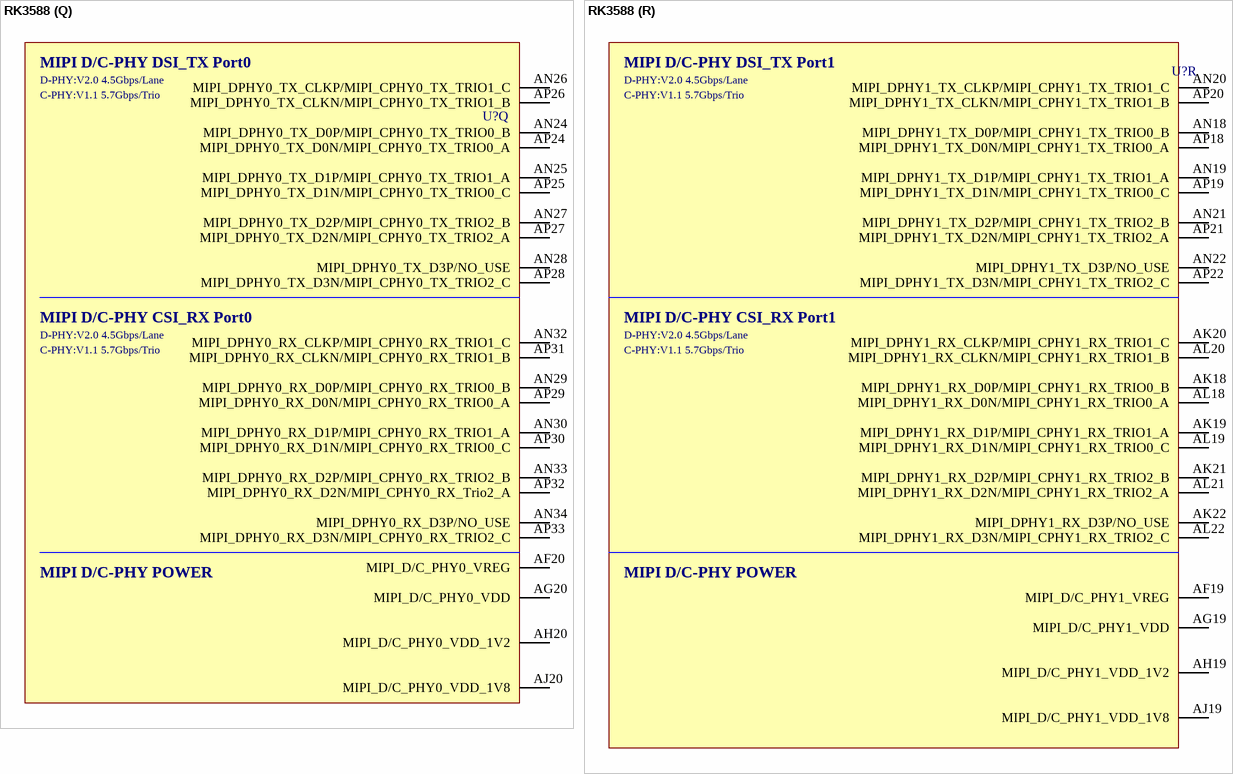
[diagram p33: symbol RK3588]

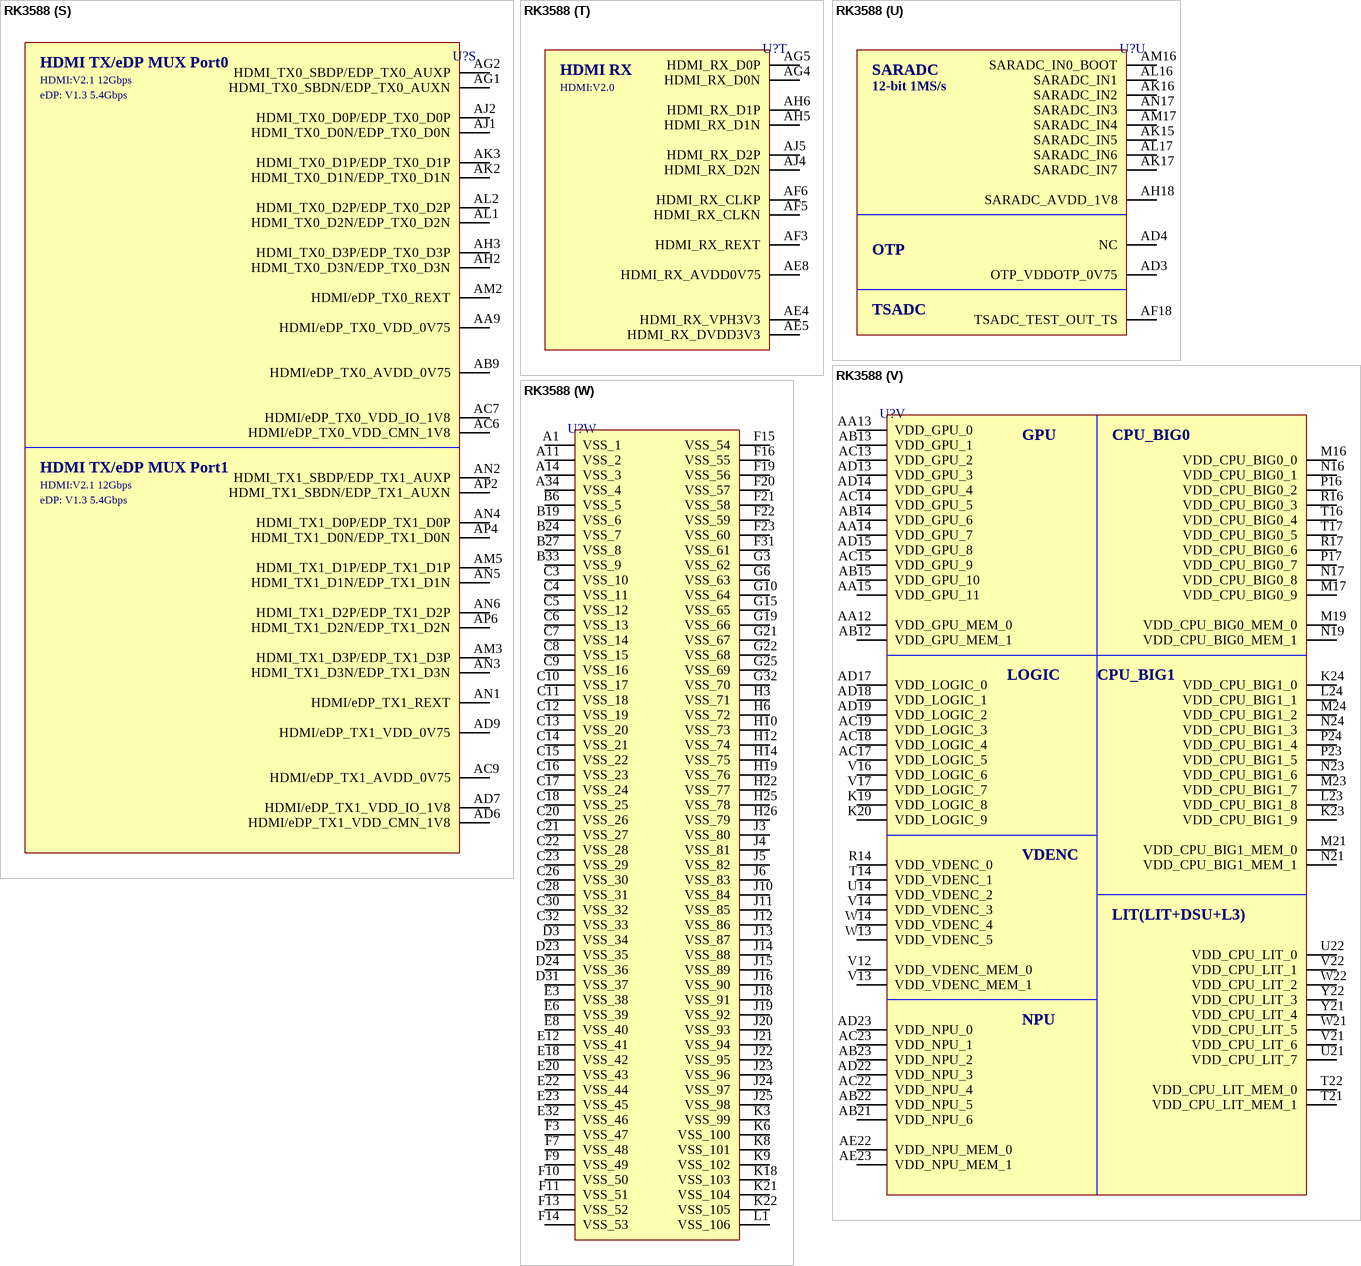
[diagram p34: symbol RK3588]

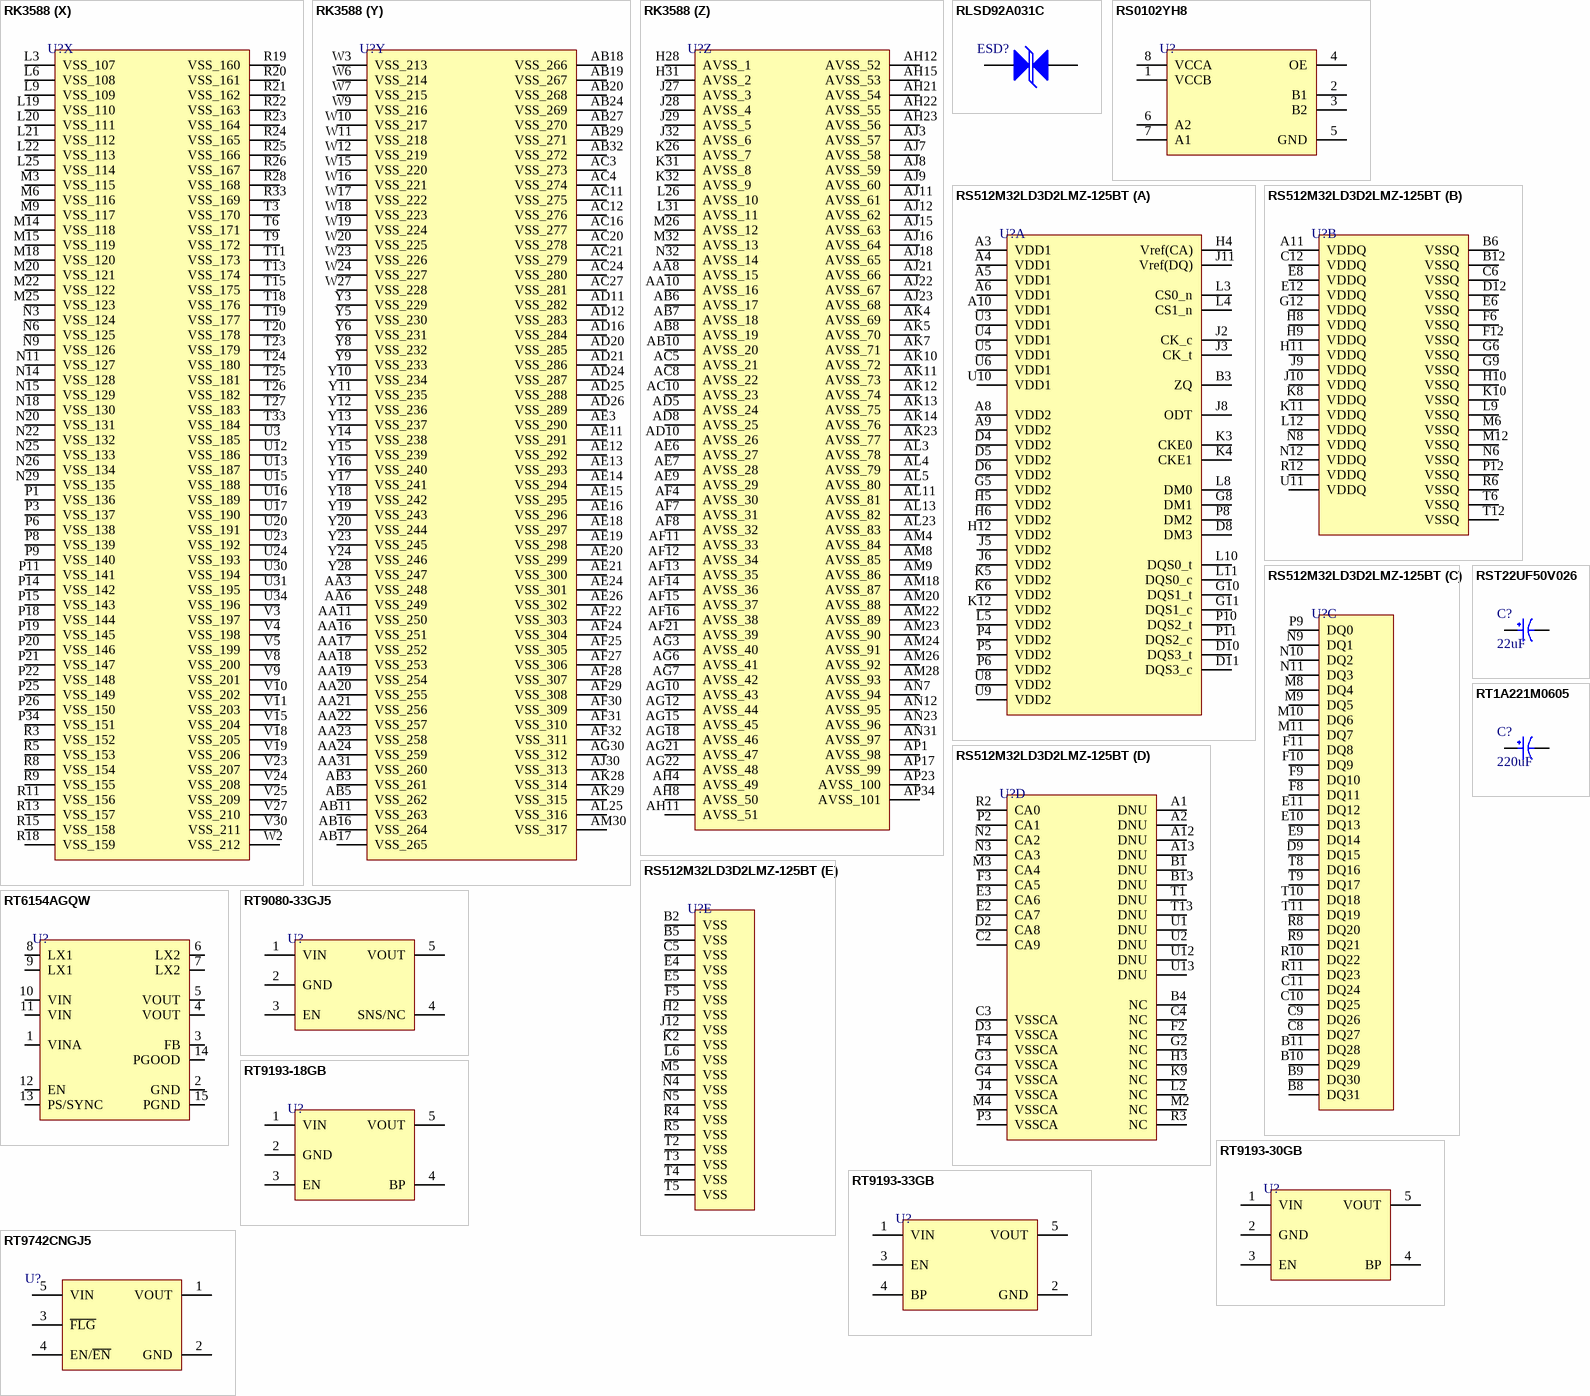
[diagram p35: symbols RK3588 to RT9742CNGJ5]